# Altium schematic symbol library SBC_Schlib.SchLib: 69 symbols
Pins are listed as number, name and electrical type; pins without a type are passive.

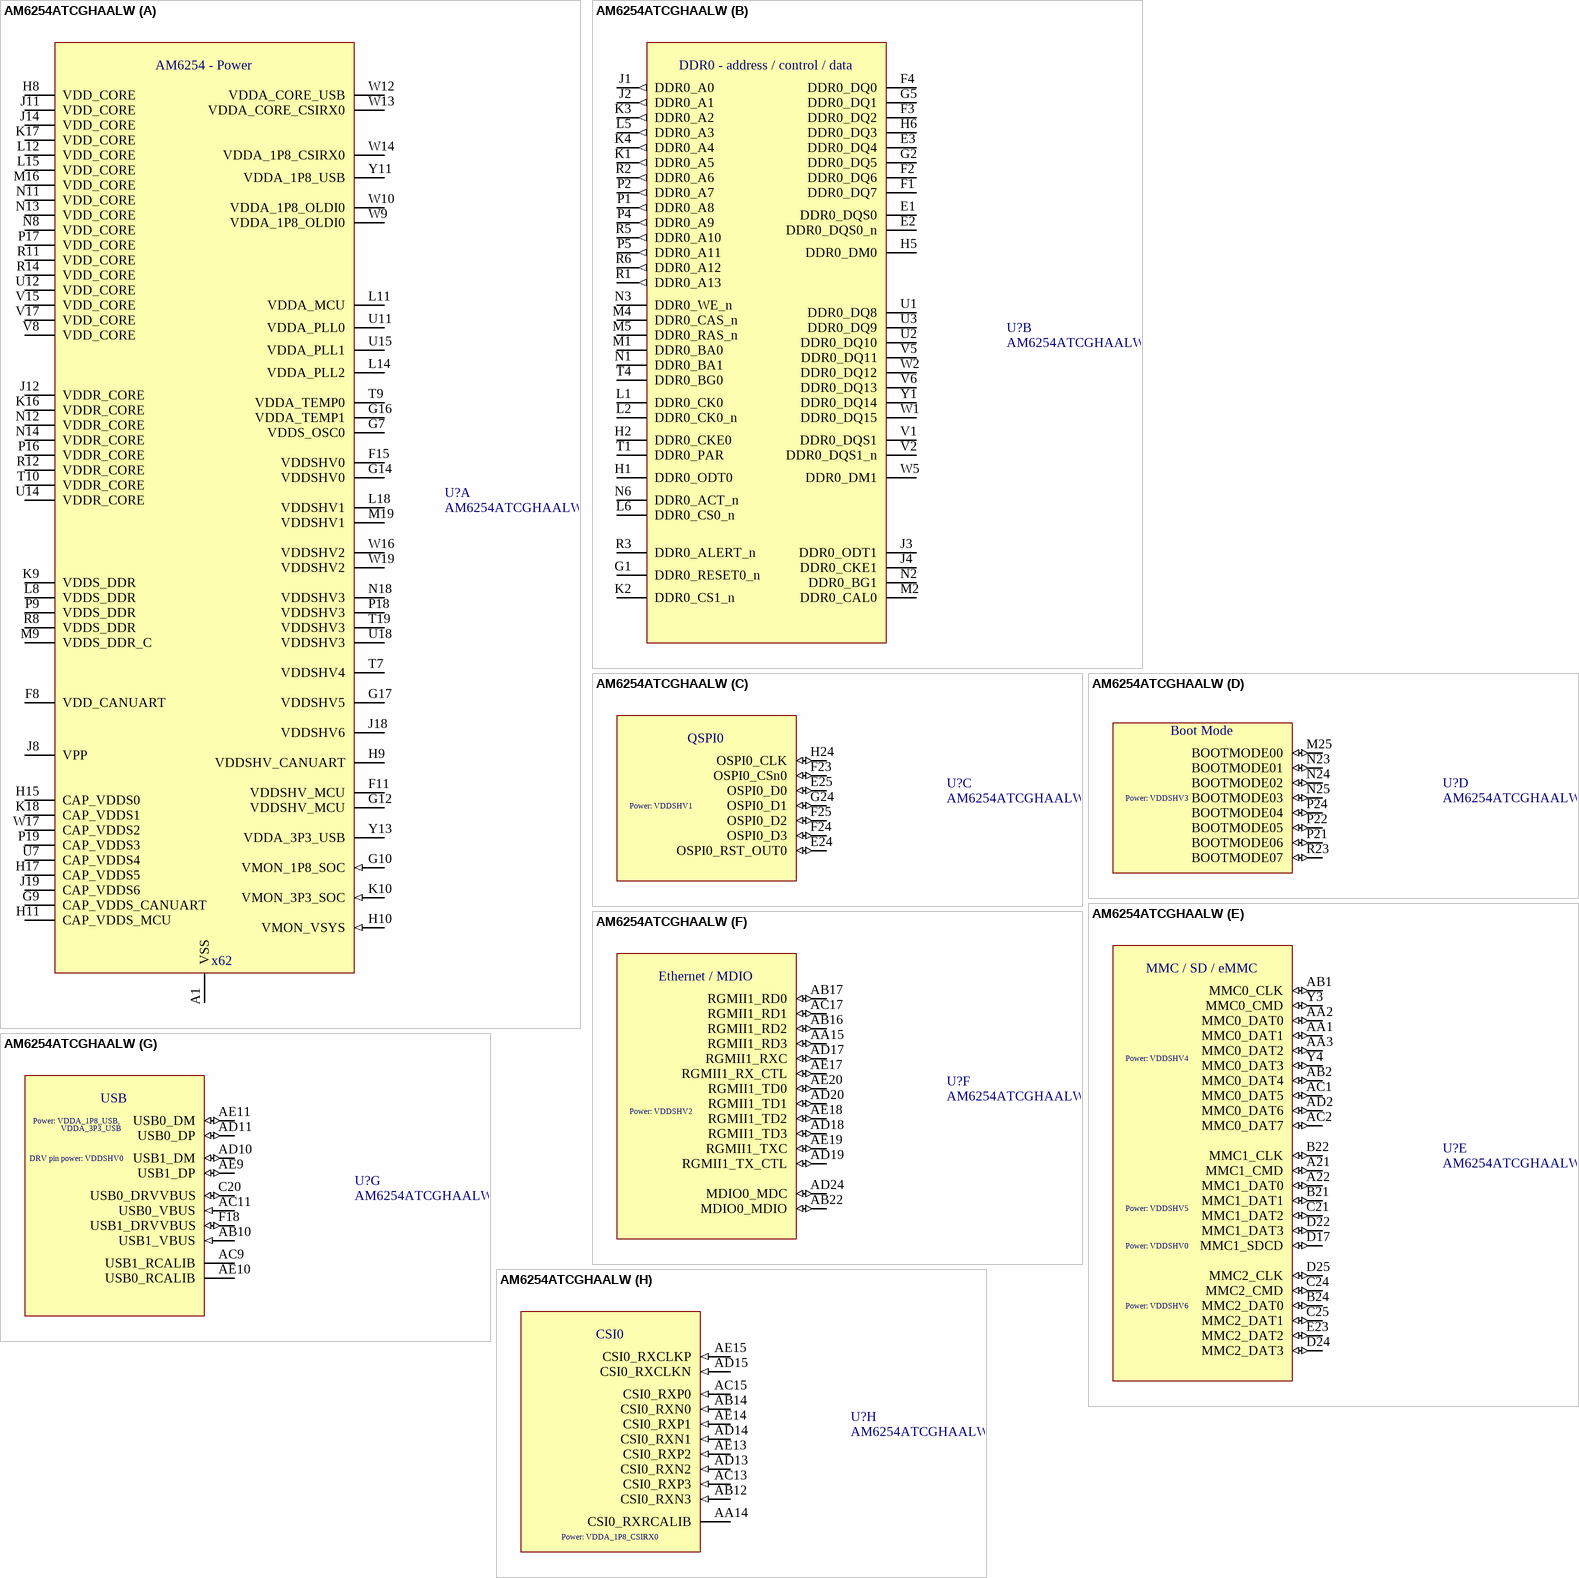
[diagram p0: symbol AM6254ATCGHAALW]

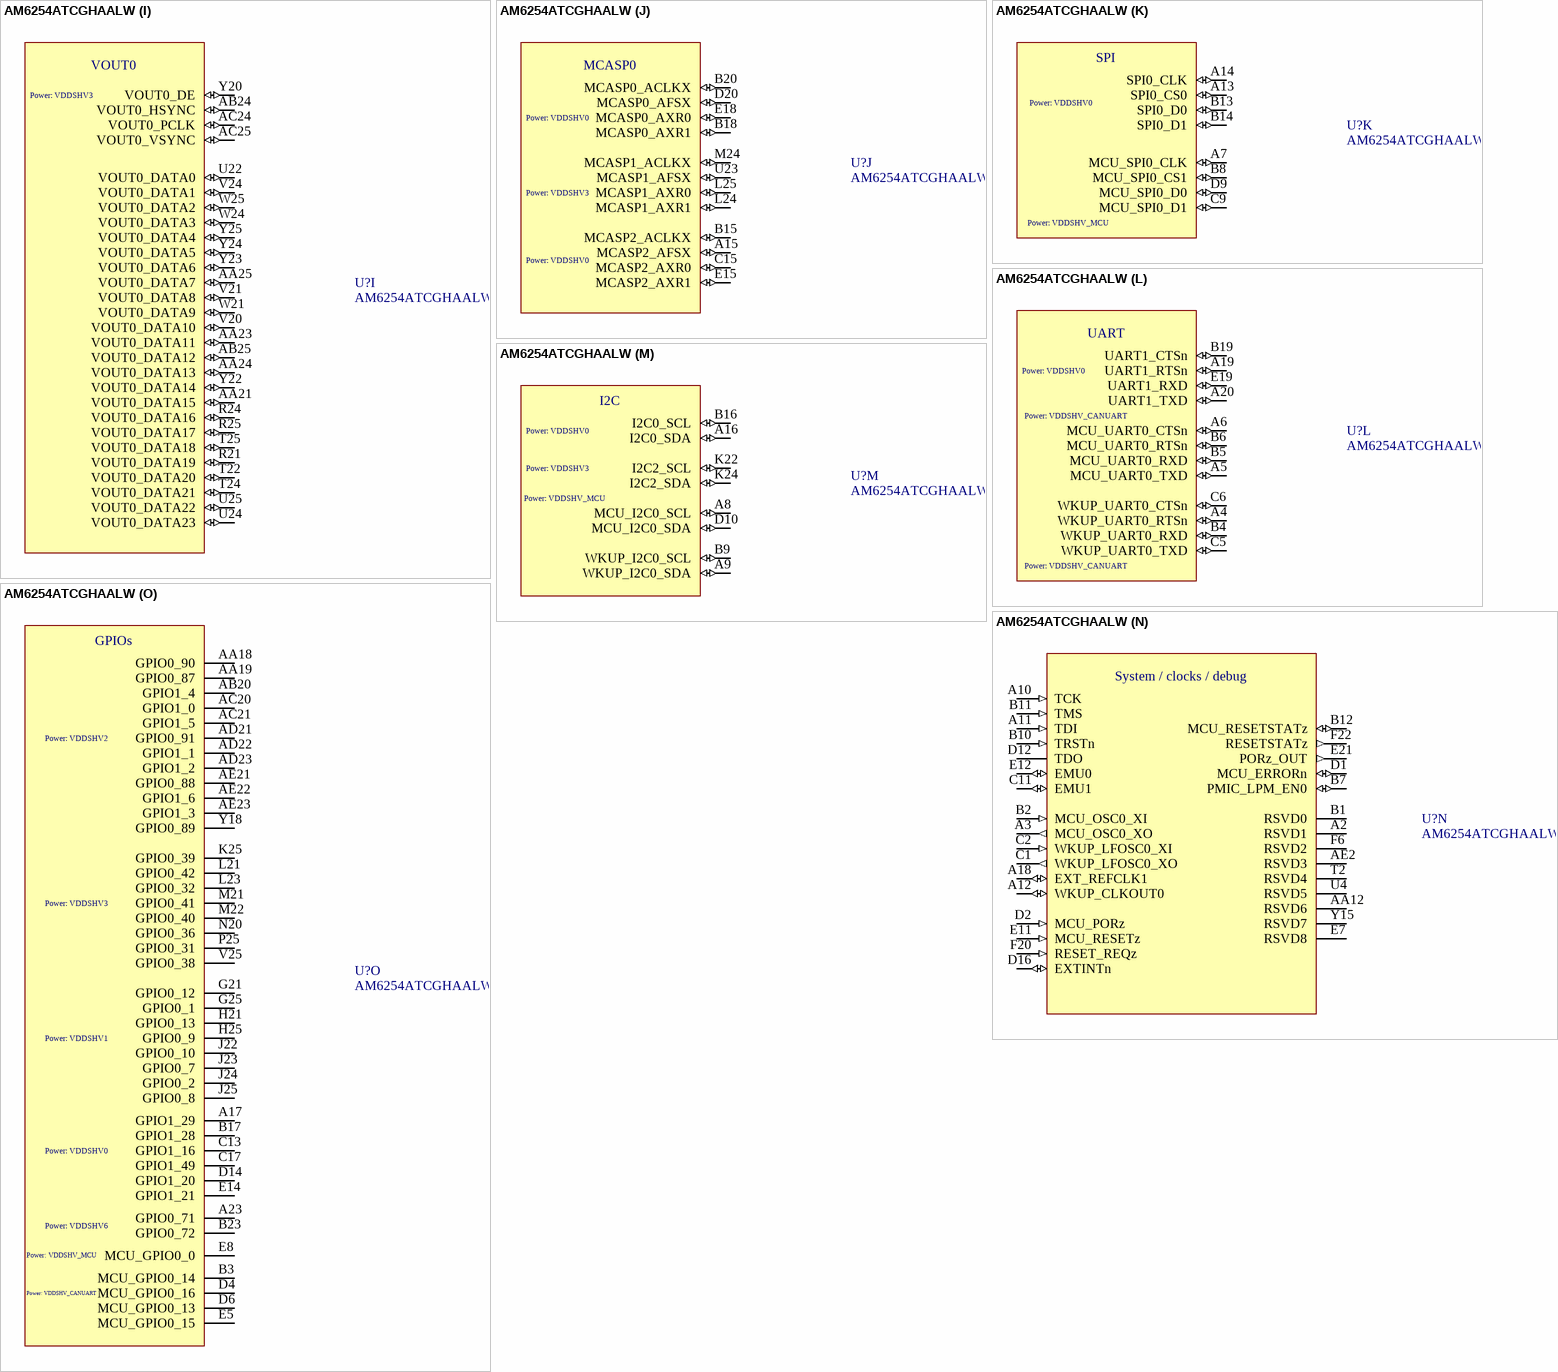
[diagram p1: symbol AM6254ATCGHAALW]

## AM6254ATCGHAALW
designator U?
TI AM6254, quad Cortex-A53 SoC, ALW 425-ball FCCSP 13x13mm 0.5mm pitch; separate interface and power units; Pinmux_Note: Each physical ball occurs once under its primary interface. See companion pinmux CSV for alternate functions. Multiplexable digital pads use bidirectional ERC type.; KiCad_Footprint: SamacSys_Parts:BGA425C50P25X25_1300X1300X89; MPN: AM6254ATCGHAALW; Footprint_Note: Unassigned: requires verified ALW0425 425-ball FCCSP, 13x13mm, 0.5mm pitch; do not substitute a fully populated BGA.; Datasheet: https://www.ti.com/lit/ds/symlink/am625.pdf; ComponentLink1Description: Datasheet; ComponentLink1URL: https://www.ti.com/lit/ds/symlink/am625.pdf
footprint AM6254ATCGHAALW
part A pins: A1 VSS (power), A24 VSS, A25 VSS, AA11 VSS, AB9 VSS, AD1 VSS, AD9 VSS, AD12 VSS, AD16 VSS, AD25 VSS, AE1 VSS, AE8 VSS, AE12 VSS, AE16 VSS, AE24 VSS, AE25 VSS, B25 VSS, F8 VDD_CANUART (power), F11 VDDSHV_MCU (power), F13 VSS, F15 VDDSHV0 (power), G7 VDDS_OSC0 (power), G9 CAP_VDDS_CANUART, G10 VMON_1P8_SOC (in), G12 VDDSHV_MCU (power), G13 VSS, G14 VDDSHV0 (power), G16 VDDA_TEMP1 (power), G17 VDDSHV5 (power), G19 VSS, H8 VDD_CORE (power), H9 VDDSHV_CANUART (power), H10 VMON_VSYS (in), H11 CAP_VDDS_MCU, H13 VSS, H15 CAP_VDDS0, H16 VSS, H17 CAP_VDDS5, H18 VSS, H20 VSS, J7 VSS, J8 VPP (power), J11 VDD_CORE (power), J12 VDDR_CORE (power), J13 VSS, J14 VDD_CORE (power), J18 VDDSHV6 (power), J19 CAP_VDDS6, K7 VSS, K9 VDDS_DDR (power), K10 VMON_3P3_SOC (in), K13 VSS, K15 VSS, K16 VDDR_CORE (power), K17 VDD_CORE (power), K18 CAP_VDDS1, K19 VSS, L8 VDDS_DDR (power), L11 VDDA_MCU (power), L12 VDD_CORE (power), L14 VDDA_PLL2 (power), L15 VDD_CORE (power), L18 VDDSHV1 (power), L20 VSS, M7 VSS, M8 VSS, M9 VDDS_DDR_C (power), M10 VSS, M12 VSS, M13 VSS, M16 VDD_CORE (power), M17 VSS, M18 VSS, M19 VDDSHV1 (power), N8 VDD_CORE (power), N11 VDD_CORE (power), N12 VDDR_CORE (power), N13 VDD_CORE (power), N14 VDDR_CORE (power), N15 VSS, N18 VDDSHV3 (power), P7 VSS, P9 VDDS_DDR (power), P10 VSS, P13 VSS, P16 VDDR_CORE (power), P17 VDD_CORE (power), P18 VDDSHV3 (power), P19 CAP_VDDS3, R8 VDDS_DDR (power), R11 VDD_CORE (power), R12 VDDR_CORE (power), R13 VSS, R14 VDD_CORE (power), R15 VSS, R18 VSS, R20 VSS, T7 VDDSHV4 (power), T8 VSS, T9 VDDA_TEMP0 (power), T10 VDDR_CORE (power), T13 VSS, T14 VSS, T16 VSS, T17 VSS, T18 VSS, T19 VDDSHV3 (power), U7 CAP_VDDS4, U8 VSS, U11 VDDA_PLL0 (power), U12 VDD_CORE (power), U14 VDDR_CORE (power), U15 VDDA_PLL1 (power), U18 VDDSHV3 (power), U19 VSS, V8 VDD_CORE (power), V9 VSS, V10 VSS, V11 VSS, V13 VSS, V15 VDD_CORE (power), V16 VSS, V17 VDD_CORE (power), V18 VSS, W7 VSS, W9 VDDA_1P8_OLDI0 (power), W10 VDDA_1P8_OLDI0 (power), W12 VDDA_CORE_USB (power), W13 VDDA_CORE_CSIRX0 (power), W14 VDDA_1P8_CSIRX0 (power), W16 VDDSHV2 (power), W17 CAP_VDDS2, W19 VDDSHV2 (power), Y2 VSS, Y11 VDDA_1P8_USB (power), Y13 VDDA_3P3_USB (power)
part B pins: E1 DDR0_DQS0, E2 DDR0_DQS0_n, E3 DDR0_DQ4, F1 DDR0_DQ7, F2 DDR0_DQ6, F3 DDR0_DQ2, F4 DDR0_DQ0, G1 DDR0_RESET0_n, G2 DDR0_DQ5, G5 DDR0_DQ1, H1 DDR0_ODT0, H2 DDR0_CKE0, H5 DDR0_DM0, H6 DDR0_DQ3, J1 DDR0_A0 (out), J2 DDR0_A1 (out), J3 DDR0_ODT1, J4 DDR0_CKE1, K1 DDR0_A5 (out), K2 DDR0_CS1_n, K3 DDR0_A2 (out), K4 DDR0_A4 (out), L1 DDR0_CK0, L2 DDR0_CK0_n, L5 DDR0_A3 (out), L6 DDR0_CS0_n, M1 DDR0_BA0, M2 DDR0_CAL0, M4 DDR0_CAS_n, M5 DDR0_RAS_n, N1 DDR0_BA1, N2 DDR0_BG1, N3 DDR0_WE_n, N6 DDR0_ACT_n, P1 DDR0_A8 (out), P2 DDR0_A7 (out), P4 DDR0_A9 (out), P5 DDR0_A11 (out), R1 DDR0_A13 (out), R2 DDR0_A6 (out), R3 DDR0_ALERT_n, R5 DDR0_A10 (out), R6 DDR0_A12 (out), T1 DDR0_PAR, T4 DDR0_BG0, U1 DDR0_DQ8, U2 DDR0_DQ10, U3 DDR0_DQ9, V1 DDR0_DQS1, V2 DDR0_DQS1_n, V5 DDR0_DQ11, V6 DDR0_DQ13, W1 DDR0_DQ15, W2 DDR0_DQ12, W5 DDR0_DM1, Y1 DDR0_DQ14
part C pins: E24 OSPI0_RST_OUT0 (io), E25 OSPI0_D0 (io), F23 OSPI0_CSn0 (io), F24 OSPI0_D3 (io), F25 OSPI0_D2 (io), G24 OSPI0_D1 (io), H24 OSPI0_CLK (io)
part D pins: M25 BOOTMODE00 (io), N23 BOOTMODE01 (io), N24 BOOTMODE02 (io), N25 BOOTMODE03 (io), P21 BOOTMODE06 (io), P22 BOOTMODE05 (io), P24 BOOTMODE04 (io), R23 BOOTMODE07 (io)
part E pins: A21 MMC1_CMD (io), A22 MMC1_DAT0 (io), AA1 MMC0_DAT1 (io), AA2 MMC0_DAT0 (io), AA3 MMC0_DAT2 (io), AB1 MMC0_CLK (io), AB2 MMC0_DAT4 (io), AC1 MMC0_DAT5 (io), AC2 MMC0_DAT7 (io), AD2 MMC0_DAT6 (io), B21 MMC1_DAT1 (io), B22 MMC1_CLK (io), B24 MMC2_DAT0 (io), C21 MMC1_DAT2 (io), C24 MMC2_CMD (io), C25 MMC2_DAT1 (io), D17 MMC1_SDCD (io), D22 MMC1_DAT3 (io), D24 MMC2_DAT3 (io), D25 MMC2_CLK (io), E23 MMC2_DAT2 (io), Y3 MMC0_CMD (io), Y4 MMC0_DAT3 (io)
part F pins: AA15 RGMII1_RD3 (io), AB16 RGMII1_RD2 (io), AB17 RGMII1_RD0 (io), AB22 MDIO0_MDIO (io), AC17 RGMII1_RD1 (io), AD17 RGMII1_RXC (io), AD18 RGMII1_TD3 (io), AD19 RGMII1_TX_CTL (io), AD20 RGMII1_TD1 (io), AD24 MDIO0_MDC (io), AE17 RGMII1_RX_CTL (io), AE18 RGMII1_TD2 (io), AE19 RGMII1_TXC (io), AE20 RGMII1_TD0 (io)
part G pins: AB10 USB1_VBUS (in), AC9 USB1_RCALIB, AC11 USB0_VBUS (in), AD10 USB1_DM (io), AD11 USB0_DP (io), AE9 USB1_DP (io), AE10 USB0_RCALIB, AE11 USB0_DM (io), C20 USB0_DRVVBUS (io), F18 USB1_DRVVBUS (io)
part H pins: AA14 CSI0_RXRCALIB, AB12 CSI0_RXN3 (in), AB14 CSI0_RXN0 (in), AC13 CSI0_RXP3 (in), AC15 CSI0_RXP0 (in), AD13 CSI0_RXN2 (in), AD14 CSI0_RXN1 (in), AD15 CSI0_RXCLKN (in), AE13 CSI0_RXP2 (in), AE14 CSI0_RXP1 (in), AE15 CSI0_RXCLKP (in)
part I pins: AA21 VOUT0_DATA15 (io), AA23 VOUT0_DATA11 (io), AA24 VOUT0_DATA13 (io), AA25 VOUT0_DATA7 (io), AB24 VOUT0_HSYNC (io), AB25 VOUT0_DATA12 (io), AC24 VOUT0_PCLK (io), AC25 VOUT0_VSYNC (io), R21 VOUT0_DATA19 (io), R24 VOUT0_DATA16 (io), R25 VOUT0_DATA17 (io), T22 VOUT0_DATA20 (io), T24 VOUT0_DATA21 (io), T25 VOUT0_DATA18 (io), U22 VOUT0_DATA0 (io), U24 VOUT0_DATA23 (io), U25 VOUT0_DATA22 (io), V20 VOUT0_DATA10 (io), V21 VOUT0_DATA8 (io), V24 VOUT0_DATA1 (io), W21 VOUT0_DATA9 (io), W24 VOUT0_DATA3 (io), W25 VOUT0_DATA2 (io), Y20 VOUT0_DE (io), Y22 VOUT0_DATA14 (io), Y23 VOUT0_DATA6 (io), Y24 VOUT0_DATA5 (io), Y25 VOUT0_DATA4 (io)
part J pins: A15 MCASP2_AFSX (io), B15 MCASP2_ACLKX (io), B18 MCASP0_AXR1 (io), B20 MCASP0_ACLKX (io), C15 MCASP2_AXR0 (io), D20 MCASP0_AFSX (io), E15 MCASP2_AXR1 (io), E18 MCASP0_AXR0 (io), L24 MCASP1_AXR1 (io), L25 MCASP1_AXR0 (io), M24 MCASP1_ACLKX (io), U23 MCASP1_AFSX (io)
part K pins: A7 MCU_SPI0_CLK (io), A13 SPI0_CS0 (io), A14 SPI0_CLK (io), B8 MCU_SPI0_CS1 (io), B13 SPI0_D0 (io), B14 SPI0_D1 (io), C9 MCU_SPI0_D1 (io), D9 MCU_SPI0_D0 (io)
part L pins: A4 WKUP_UART0_RTSn (io), A5 MCU_UART0_TXD (io), A6 MCU_UART0_CTSn (io), A19 UART1_RTSn (io), A20 UART1_TXD (io), B4 WKUP_UART0_RXD (io), B5 MCU_UART0_RXD (io), B6 MCU_UART0_RTSn (io), B19 UART1_CTSn (io), C5 WKUP_UART0_TXD (io), C6 WKUP_UART0_CTSn (io), E19 UART1_RXD (io)
part M pins: A8 MCU_I2C0_SCL (io), A9 WKUP_I2C0_SDA (io), A16 I2C0_SDA (io), B9 WKUP_I2C0_SCL (io), B16 I2C0_SCL (io), D10 MCU_I2C0_SDA (io), K22 I2C2_SCL (io), K24 I2C2_SDA (io)
part N pins: A2 RSVD1, A3 MCU_OSC0_XO (out), A10 TCK (in), A11 TDI (in), A12 WKUP_CLKOUT0 (io), A18 EXT_REFCLK1 (io), AA12 RSVD6, AE2 RSVD3, B1 RSVD0, B2 MCU_OSC0_XI (in), B7 PMIC_LPM_EN0 (io), B10 TRSTn (in), B11 TMS (in), B12 MCU_RESETSTATz (io), C1 WKUP_LFOSC0_XO (out), C2 WKUP_LFOSC0_XI (in), C11 EMU1 (io), D1 MCU_ERRORn (io), D2 MCU_PORz (in), D12 TDO (hiz), D16 EXTINTn (io), E7 RSVD8, E11 MCU_RESETz (in), E12 EMU0 (io), E21 PORz_OUT (out), F6 RSVD2, F20 RESET_REQz (in), F22 RESETSTATz (out), T2 RSVD4, U4 RSVD5, Y15 RSVD7
part O pins: A17 GPIO1_29, A23 GPIO0_71, AA18 GPIO0_90, AA19 GPIO0_87, AB20 GPIO1_4, AC20 GPIO1_0, AC21 GPIO1_5, AD21 GPIO0_91, AD22 GPIO1_1, AD23 GPIO1_2, AE21 GPIO0_88, AE22 GPIO1_6, AE23 GPIO1_3, B3 MCU_GPIO0_14, B17 GPIO1_28, B23 GPIO0_72, C13 GPIO1_16, C17 GPIO1_49, D4 MCU_GPIO0_16, D6 MCU_GPIO0_13, D14 GPIO1_20, E5 MCU_GPIO0_15, E8 MCU_GPIO0_0, E14 GPIO1_21, G21 GPIO0_12, G25 GPIO0_1, H21 GPIO0_13, H25 GPIO0_9, J22 GPIO0_10, J23 GPIO0_7, J24 GPIO0_2, J25 GPIO0_8, K25 GPIO0_39, L21 GPIO0_42, L23 GPIO0_32, M21 GPIO0_41, M22 GPIO0_40, N20 GPIO0_36, P25 GPIO0_31, V25 GPIO0_38, Y18 GPIO0_89
part A text: AM6254 - Power; x62
part B text: DDR0 - address / control / data
part C text: QSPI0; Power: VDDSHV1
part D text: Boot Mode; Power: VDDSHV3
part E text: MMC / SD / eMMC; Power: VDDSHV4; Power: VDDSHV5; Power: VDDSHV0; Power: VDDSHV6
part F text: Ethernet / MDIO; Power: VDDSHV2
part G text: USB; Power: VDDA_1P8_USB,; DRV pin power: VDDSHV0
part H text: CSI0; Power: VDDA_1P8_CSIRX0
part I text: VOUT0; Power: VDDSHV3
part J text: MCASP0; Power: VDDSHV0; Power: VDDSHV3
part K text: SPI; Power: VDDSHV0; Power: VDDSHV_MCU
part L text: UART; Power: VDDSHV0; Power: VDDSHV_CANUART
part M text: I2C; Power: VDDSHV0; Power: VDDSHV3; Power: VDDSHV_MCU
part N text: System / clocks / debug
part O text: GPIOs; Power: VDDSHV2; Power: VDDSHV3; Power: VDDSHV1; Power: VDDSHV0; Power: VDDSHV6; Power: VDDSHV_MCU; Power: VDDSHV_CANUART

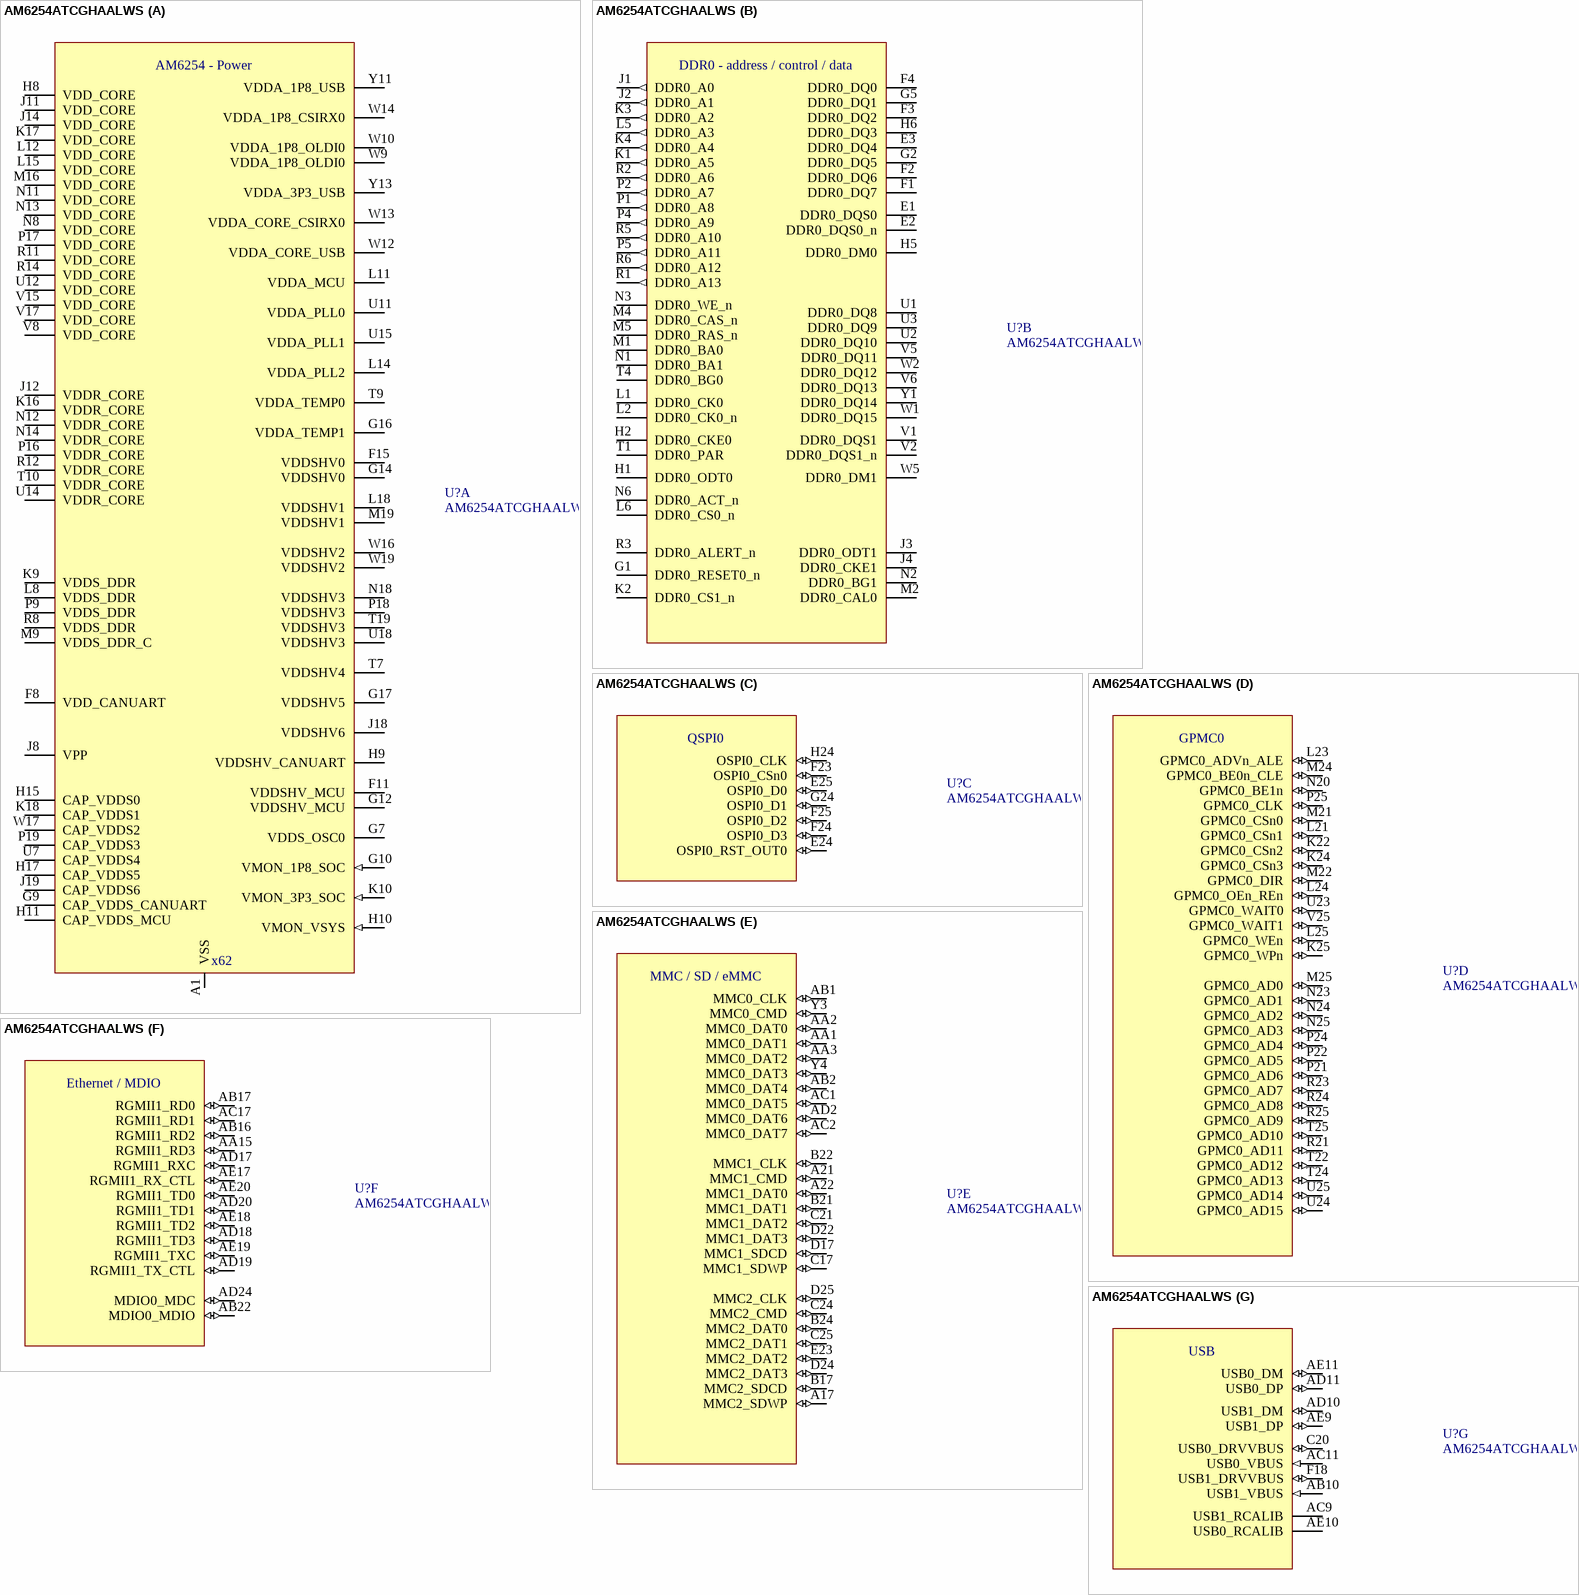
[diagram p2: symbol AM6254ATCGHAALWS]

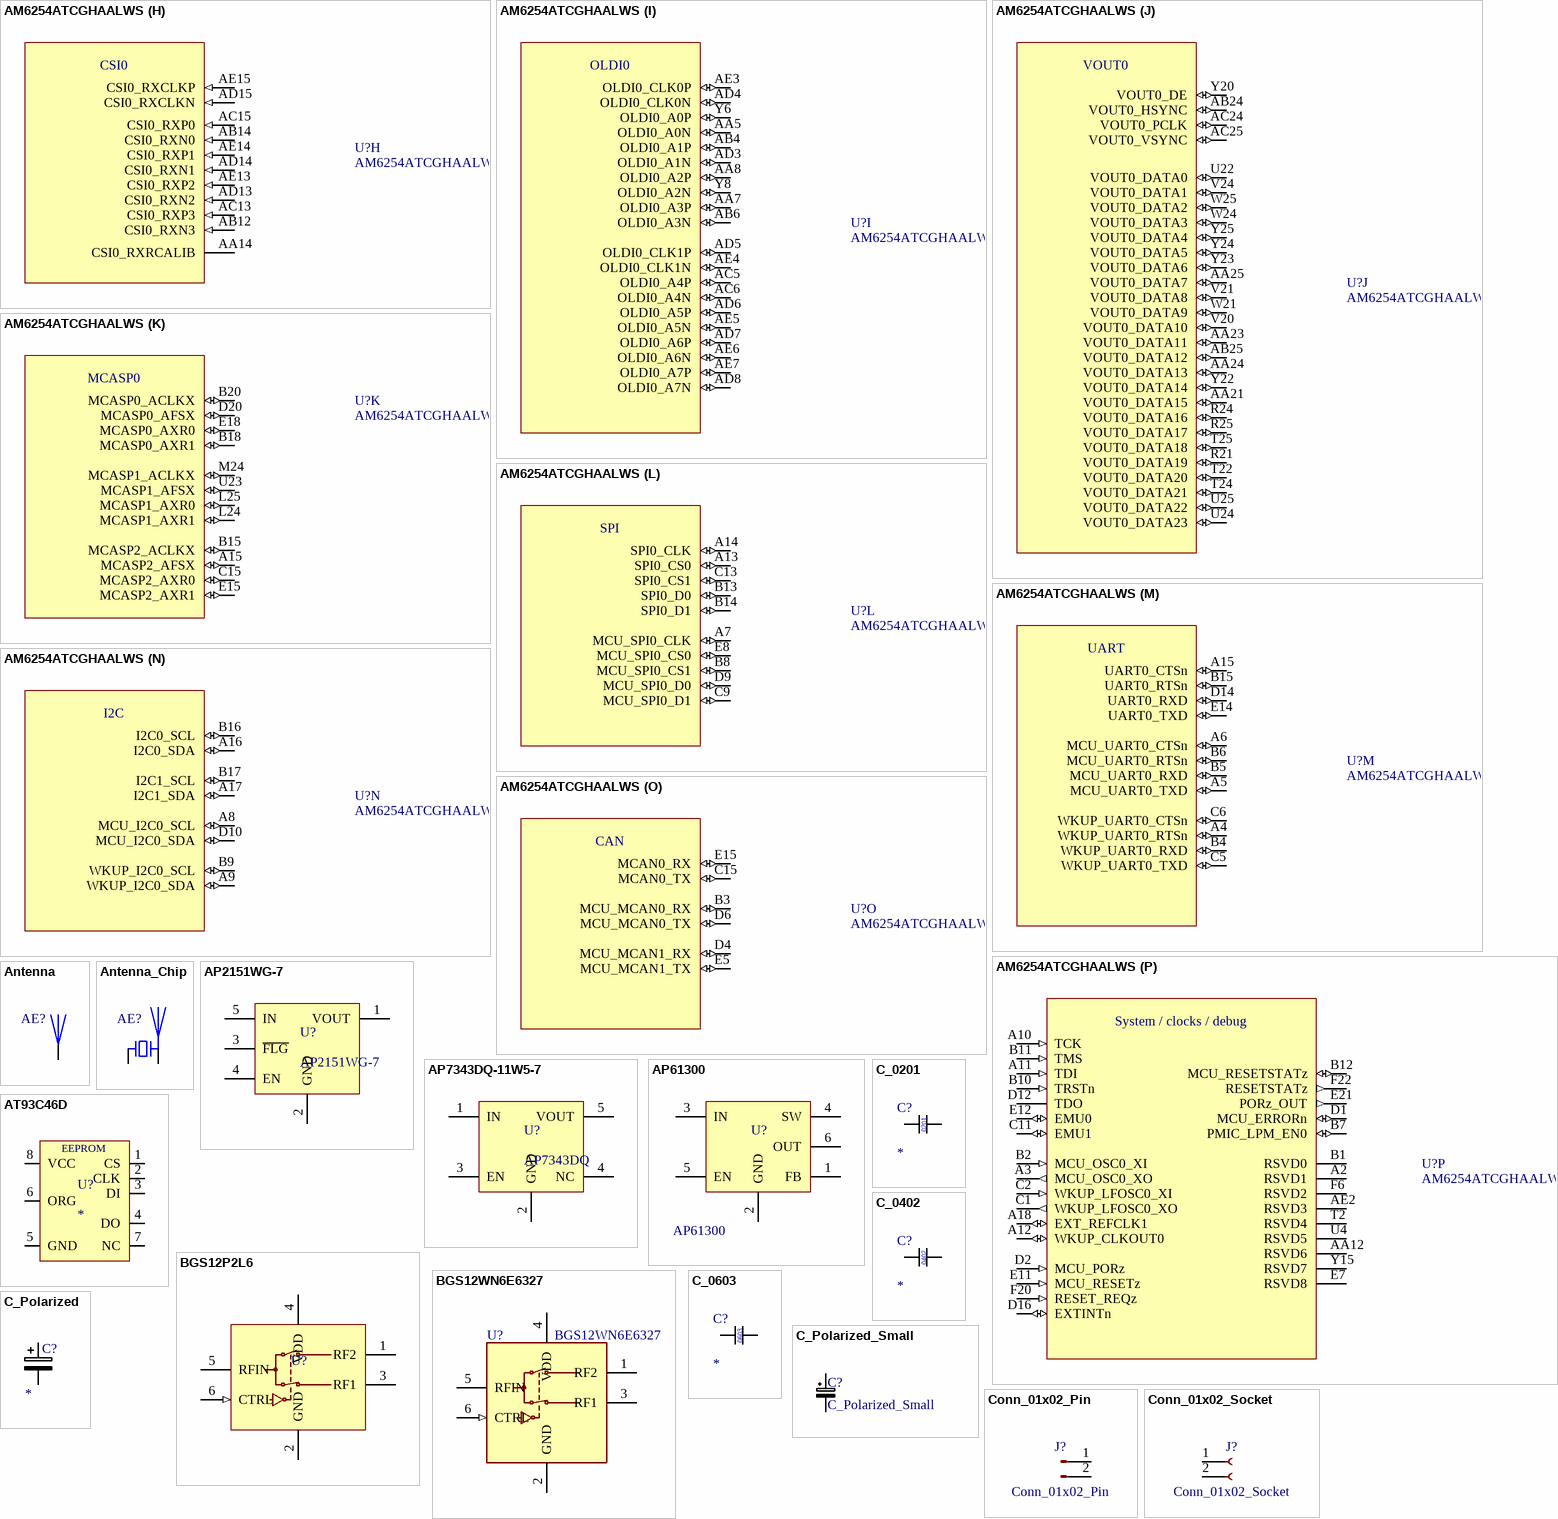
[diagram p3: symbols AM6254ATCGHAALWS to Conn_01x02_Socket]

## AM6254ATCGHAALWS
designator U?, comment AM6254ATCGHAALW
TI AM6254, quad Cortex-A53 SoC, ALW 425-ball FCCSP 13x13mm 0.5mm pitch; separate interface and power units; Pinmux_Note: Each physical ball occurs once under its primary interface. See companion pinmux CSV for alternate functions. Multiplexable digital pads use bidirectional ERC type.; KiCad_Footprint: SamacSys_Parts:BGA425C50P25X25_1300X1300X89; MPN: AM6254ATCGHAALW; Footprint_Note: Unassigned: requires verified ALW0425 425-ball FCCSP, 13x13mm, 0.5mm pitch; do not substitute a fully populated BGA.; Datasheet: https://www.ti.com/lit/ds/symlink/am625.pdf; ComponentLink1Description: Datasheet; ComponentLink1URL: https://www.ti.com/lit/ds/symlink/am625.pdf
footprint AM6254ATCGHAALW
part A pins: A1 VSS (power), A24 VSS hidden, A25 VSS hidden, AA11 VSS hidden, AB9 VSS hidden, AD1 VSS hidden, AD9 VSS hidden, AD12 VSS hidden, AD16 VSS hidden, AD25 VSS hidden, AE1 VSS hidden, AE8 VSS hidden, AE12 VSS hidden, AE16 VSS hidden, AE24 VSS hidden, AE25 VSS hidden, B25 VSS hidden, F8 VDD_CANUART (power), F11 VDDSHV_MCU (power), F13 VSS hidden, F15 VDDSHV0 (power), G7 VDDS_OSC0 (power), G9 CAP_VDDS_CANUART, G10 VMON_1P8_SOC (in), G12 VDDSHV_MCU (power), G13 VSS hidden, G14 VDDSHV0 (power), G16 VDDA_TEMP1 (power), G17 VDDSHV5 (power), G19 VSS hidden, H8 VDD_CORE (power), H9 VDDSHV_CANUART (power), H10 VMON_VSYS (in), H11 CAP_VDDS_MCU, H13 VSS hidden, H15 CAP_VDDS0, H16 VSS hidden, H17 CAP_VDDS5, H18 VSS hidden, H20 VSS hidden, J7 VSS hidden, J8 VPP (power), J11 VDD_CORE (power), J12 VDDR_CORE (power), J13 VSS hidden, J14 VDD_CORE (power), J18 VDDSHV6 (power), J19 CAP_VDDS6, K7 VSS hidden, K9 VDDS_DDR (power), K10 VMON_3P3_SOC (in), K13 VSS hidden, K15 VSS hidden, K16 VDDR_CORE (power), K17 VDD_CORE (power), K18 CAP_VDDS1, K19 VSS hidden, L8 VDDS_DDR (power), L11 VDDA_MCU (power), L12 VDD_CORE (power), L14 VDDA_PLL2 (power), L15 VDD_CORE (power), L18 VDDSHV1 (power), L20 VSS hidden, M7 VSS hidden, M8 VSS hidden, M9 VDDS_DDR_C (power), M10 VSS hidden, M12 VSS hidden, M13 VSS hidden, M16 VDD_CORE (power), M17 VSS hidden, M18 VSS hidden, M19 VDDSHV1 (power), N8 VDD_CORE (power), N11 VDD_CORE (power), N12 VDDR_CORE (power), N13 VDD_CORE (power), N14 VDDR_CORE (power), N15 VSS hidden, N18 VDDSHV3 (power), P7 VSS hidden, P9 VDDS_DDR (power), P10 VSS hidden, P13 VSS hidden, P16 VDDR_CORE (power), P17 VDD_CORE (power), P18 VDDSHV3 (power), P19 CAP_VDDS3, R8 VDDS_DDR (power), R11 VDD_CORE (power), R12 VDDR_CORE (power), R13 VSS hidden, R14 VDD_CORE (power), R15 VSS hidden, R18 VSS hidden, R20 VSS hidden, T7 VDDSHV4 (power), T8 VSS hidden, T9 VDDA_TEMP0 (power), T10 VDDR_CORE (power), T13 VSS hidden, T14 VSS hidden, T16 VSS hidden, T17 VSS hidden, T18 VSS hidden, T19 VDDSHV3 (power), U7 CAP_VDDS4, U8 VSS hidden, U11 VDDA_PLL0 (power), U12 VDD_CORE (power), U14 VDDR_CORE (power), U15 VDDA_PLL1 (power), U18 VDDSHV3 (power), U19 VSS hidden, V8 VDD_CORE (power), V9 VSS hidden, V10 VSS hidden, V11 VSS hidden, V13 VSS hidden, V15 VDD_CORE (power), V16 VSS hidden, V17 VDD_CORE (power), V18 VSS hidden, W7 VSS hidden, W9 VDDA_1P8_OLDI0 (power), W10 VDDA_1P8_OLDI0 (power), W12 VDDA_CORE_USB (power), W13 VDDA_CORE_CSIRX0 (power), W14 VDDA_1P8_CSIRX0 (power), W16 VDDSHV2 (power), W17 CAP_VDDS2, W19 VDDSHV2 (power), Y2 VSS hidden, Y11 VDDA_1P8_USB (power), Y13 VDDA_3P3_USB (power)
part B pins: E1 DDR0_DQS0, E2 DDR0_DQS0_n, E3 DDR0_DQ4, F1 DDR0_DQ7, F2 DDR0_DQ6, F3 DDR0_DQ2, F4 DDR0_DQ0, G1 DDR0_RESET0_n, G2 DDR0_DQ5, G5 DDR0_DQ1, H1 DDR0_ODT0, H2 DDR0_CKE0, H5 DDR0_DM0, H6 DDR0_DQ3, J1 DDR0_A0 (out), J2 DDR0_A1 (out), J3 DDR0_ODT1, J4 DDR0_CKE1, K1 DDR0_A5 (out), K2 DDR0_CS1_n, K3 DDR0_A2 (out), K4 DDR0_A4 (out), L1 DDR0_CK0, L2 DDR0_CK0_n, L5 DDR0_A3 (out), L6 DDR0_CS0_n, M1 DDR0_BA0, M2 DDR0_CAL0, M4 DDR0_CAS_n, M5 DDR0_RAS_n, N1 DDR0_BA1, N2 DDR0_BG1, N3 DDR0_WE_n, N6 DDR0_ACT_n, P1 DDR0_A8 (out), P2 DDR0_A7 (out), P4 DDR0_A9 (out), P5 DDR0_A11 (out), R1 DDR0_A13 (out), R2 DDR0_A6 (out), R3 DDR0_ALERT_n, R5 DDR0_A10 (out), R6 DDR0_A12 (out), T1 DDR0_PAR, T4 DDR0_BG0, U1 DDR0_DQ8, U2 DDR0_DQ10, U3 DDR0_DQ9, V1 DDR0_DQS1, V2 DDR0_DQS1_n, V5 DDR0_DQ11, V6 DDR0_DQ13, W1 DDR0_DQ15, W2 DDR0_DQ12, W5 DDR0_DM1, Y1 DDR0_DQ14
part C pins: E24 OSPI0_RST_OUT0 (io), E25 OSPI0_D0 (io), F23 OSPI0_CSn0 (io), F24 OSPI0_D3 (io), F25 OSPI0_D2 (io), G24 OSPI0_D1 (io), H24 OSPI0_CLK (io)
part D pins: K22 GPMC0_CSn2 (io), K24 GPMC0_CSn3 (io), K25 GPMC0_WPn (io), L21 GPMC0_CSn1 (io), L23 GPMC0_ADVn_ALE (io), L24 GPMC0_OEn_REn (io), L25 GPMC0_WEn (io), M21 GPMC0_CSn0 (io), M22 GPMC0_DIR (io), M24 GPMC0_BE0n_CLE (io), M25 GPMC0_AD0 (io), N20 GPMC0_BE1n (io), N23 GPMC0_AD1 (io), N24 GPMC0_AD2 (io), N25 GPMC0_AD3 (io), P21 GPMC0_AD6 (io), P22 GPMC0_AD5 (io), P24 GPMC0_AD4 (io), P25 GPMC0_CLK (io), R21 GPMC0_AD11 (io), R23 GPMC0_AD7 (io), R24 GPMC0_AD8 (io), R25 GPMC0_AD9 (io), T22 GPMC0_AD12 (io), T24 GPMC0_AD13 (io), T25 GPMC0_AD10 (io), U23 GPMC0_WAIT0 (io), U24 GPMC0_AD15 (io), U25 GPMC0_AD14 (io), V25 GPMC0_WAIT1 (io)
part E pins: A17 MMC2_SDWP (io), A21 MMC1_CMD (io), A22 MMC1_DAT0 (io), AA1 MMC0_DAT1 (io), AA2 MMC0_DAT0 (io), AA3 MMC0_DAT2 (io), AB1 MMC0_CLK (io), AB2 MMC0_DAT4 (io), AC1 MMC0_DAT5 (io), AC2 MMC0_DAT7 (io), AD2 MMC0_DAT6 (io), B17 MMC2_SDCD (io), B21 MMC1_DAT1 (io), B22 MMC1_CLK (io), B24 MMC2_DAT0 (io), C17 MMC1_SDWP (io), C21 MMC1_DAT2 (io), C24 MMC2_CMD (io), C25 MMC2_DAT1 (io), D17 MMC1_SDCD (io), D22 MMC1_DAT3 (io), D24 MMC2_DAT3 (io), D25 MMC2_CLK (io), E23 MMC2_DAT2 (io), Y3 MMC0_CMD (io), Y4 MMC0_DAT3 (io)
part F pins: AA15 RGMII1_RD3 (io), AB16 RGMII1_RD2 (io), AB17 RGMII1_RD0 (io), AB22 MDIO0_MDIO (io), AC17 RGMII1_RD1 (io), AD17 RGMII1_RXC (io), AD18 RGMII1_TD3 (io), AD19 RGMII1_TX_CTL (io), AD20 RGMII1_TD1 (io), AD24 MDIO0_MDC (io), AE17 RGMII1_RX_CTL (io), AE18 RGMII1_TD2 (io), AE19 RGMII1_TXC (io), AE20 RGMII1_TD0 (io)
part G pins: AB10 USB1_VBUS (in), AC9 USB1_RCALIB, AC11 USB0_VBUS (in), AD10 USB1_DM (io), AD11 USB0_DP (io), AE9 USB1_DP (io), AE10 USB0_RCALIB, AE11 USB0_DM (io), C20 USB0_DRVVBUS (io), F18 USB1_DRVVBUS (io)
part H pins: AA14 CSI0_RXRCALIB, AB12 CSI0_RXN3 (in), AB14 CSI0_RXN0 (in), AC13 CSI0_RXP3 (in), AC15 CSI0_RXP0 (in), AD13 CSI0_RXN2 (in), AD14 CSI0_RXN1 (in), AD15 CSI0_RXCLKN (in), AE13 CSI0_RXP2 (in), AE14 CSI0_RXP1 (in), AE15 CSI0_RXCLKP (in)
part I pins: AA5 OLDI0_A0N (io), AA7 OLDI0_A3P (io), AA8 OLDI0_A2P (io), AB4 OLDI0_A1P (io), AB6 OLDI0_A3N (io), AC5 OLDI0_A4P (io), AC6 OLDI0_A4N (io), AD3 OLDI0_A1N (io), AD4 OLDI0_CLK0N (io), AD5 OLDI0_CLK1P (io), AD6 OLDI0_A5P (io), AD7 OLDI0_A6P (io), AD8 OLDI0_A7N (io), AE3 OLDI0_CLK0P (io), AE4 OLDI0_CLK1N (io), AE5 OLDI0_A5N (io), AE6 OLDI0_A6N (io), AE7 OLDI0_A7P (io), Y6 OLDI0_A0P (io), Y8 OLDI0_A2N (io)
part J pins: AA21 VOUT0_DATA15 (io), AA23 VOUT0_DATA11 (io), AA24 VOUT0_DATA13 (io), AA25 VOUT0_DATA7 (io), AB24 VOUT0_HSYNC (io), AB25 VOUT0_DATA12 (io), AC24 VOUT0_PCLK (io), AC25 VOUT0_VSYNC (io), R21 VOUT0_DATA19 (io), R24 VOUT0_DATA16 (io), R25 VOUT0_DATA17 (io), T22 VOUT0_DATA20 (io), T24 VOUT0_DATA21 (io), T25 VOUT0_DATA18 (io), U22 VOUT0_DATA0 (io), U24 VOUT0_DATA23 (io), U25 VOUT0_DATA22 (io), V20 VOUT0_DATA10 (io), V21 VOUT0_DATA8 (io), V24 VOUT0_DATA1 (io), W21 VOUT0_DATA9 (io), W24 VOUT0_DATA3 (io), W25 VOUT0_DATA2 (io), Y20 VOUT0_DE (io), Y22 VOUT0_DATA14 (io), Y23 VOUT0_DATA6 (io), Y24 VOUT0_DATA5 (io), Y25 VOUT0_DATA4 (io)
part K pins: A15 MCASP2_AFSX (io), B15 MCASP2_ACLKX (io), B18 MCASP0_AXR1 (io), B20 MCASP0_ACLKX (io), C15 MCASP2_AXR0 (io), D20 MCASP0_AFSX (io), E15 MCASP2_AXR1 (io), E18 MCASP0_AXR0 (io), L24 MCASP1_AXR1 (io), L25 MCASP1_AXR0 (io), M24 MCASP1_ACLKX (io), U23 MCASP1_AFSX (io)
part L pins: A7 MCU_SPI0_CLK (io), A13 SPI0_CS0 (io), A14 SPI0_CLK (io), B8 MCU_SPI0_CS1 (io), B13 SPI0_D0 (io), B14 SPI0_D1 (io), C9 MCU_SPI0_D1 (io), C13 SPI0_CS1 (io), D9 MCU_SPI0_D0 (io), E8 MCU_SPI0_CS0 (io)
part M pins: A4 WKUP_UART0_RTSn (io), A5 MCU_UART0_TXD (io), A6 MCU_UART0_CTSn (io), A15 UART0_CTSn (io), B4 WKUP_UART0_RXD (io), B5 MCU_UART0_RXD (io), B6 MCU_UART0_RTSn (io), B15 UART0_RTSn (io), C5 WKUP_UART0_TXD (io), C6 WKUP_UART0_CTSn (io), D14 UART0_RXD (io), E14 UART0_TXD (io)
part N pins: A8 MCU_I2C0_SCL (io), A9 WKUP_I2C0_SDA (io), A16 I2C0_SDA (io), A17 I2C1_SDA (io), B9 WKUP_I2C0_SCL (io), B16 I2C0_SCL (io), B17 I2C1_SCL (io), D10 MCU_I2C0_SDA (io)
part O pins: B3 MCU_MCAN0_RX (io), C15 MCAN0_TX (io), D4 MCU_MCAN1_RX (io), D6 MCU_MCAN0_TX (io), E5 MCU_MCAN1_TX (io), E15 MCAN0_RX (io)
part P pins: A2 RSVD1, A3 MCU_OSC0_XO (out), A10 TCK (in), A11 TDI (in), A12 WKUP_CLKOUT0 (io), A18 EXT_REFCLK1 (io), AA12 RSVD6, AE2 RSVD3, B1 RSVD0, B2 MCU_OSC0_XI (in), B7 PMIC_LPM_EN0 (io), B10 TRSTn (in), B11 TMS (in), B12 MCU_RESETSTATz (io), C1 WKUP_LFOSC0_XO (out), C2 WKUP_LFOSC0_XI (in), C11 EMU1 (io), D1 MCU_ERRORn (io), D2 MCU_PORz (in), D12 TDO (hiz), D16 EXTINTn (io), E7 RSVD8, E11 MCU_RESETz (in), E12 EMU0 (io), E21 PORz_OUT (out), F6 RSVD2, F20 RESET_REQz (in), F22 RESETSTATz (out), T2 RSVD4, U4 RSVD5, Y15 RSVD7
part A text: AM6254 - Power; x62
part B text: DDR0 - address / control / data
part C text: QSPI0
part D text: GPMC0
part E text: MMC / SD / eMMC
part F text: Ethernet / MDIO
part G text: USB
part H text: CSI0
part I text: OLDI0
part J text: VOUT0
part K text: MCASP0
part L text: SPI
part M text: UART
part N text: I2C
part O text: CAN
part P text: System / clocks / debug

## Antenna
designator AE?  (value not drawn)
Manufacturer_Name: Johanson Technology Inc.; Manufacturer_Part_Number: 2450AD14A5500001T; Value: 2450AD14A5500001T
footprint 2450AD14A5500001T
pins: 1 A

## Antenna_Chip
designator AE?  (value not drawn)
Ceramic chip antenna with pin for PCB trace
footprint 2450AD14A5500001T
pins: 1 GND, 4 FEED

## AP2151WG-7
designator U?
Linear Voltage Regulator IC Positive Fixed 1 Output 300mA SOT-25; Manufacturer_Name: Diodes Incorporated; Manufacturer_Part_Number: AP2151WG-7; Value: AP2151WG-7
footprint SOT-23-5 (TI SOT-23-5)
pins: 1 VOUT, 2 GND, 3 ~{FLG}, 4 EN, 5 IN

## AP7343DQ-11W5-7
designator U?, comment AP7343DQ
Linear Voltage Regulator IC Positive Fixed 1 Output 300mA SOT-25; Manufacturer_Name: Diodes Incorporated; Manufacturer_Part_Number: AP7343DQ-11W5-7; Value: AP7343DQ-11W5-7
pins: 1 IN, 2 GND, 3 EN, 4 NC, 5 VOUT

## AP61300
designator U?
Buck Switching Regulator IC Positive Adjustable 0.6V 1 Output 3A SOT-563; Manufacturer_Name: Diodes Incorporated; Manufacturer_Part_Number: AP61300Z6-7; Value: AP61300
footprint SOT563
pins: 1 FB, 2 GND, 3 IN, 4 SW, 5 EN, 6 OUT

## AT93C46D
designator U?
pins: 1 CS, 2 CLK, 3 DI, 4 DO, 5 GND, 6 ORG, 7 NC, 8 VCC
text: EEPROM

## BGS12P2L6
designator U?  (value not drawn)
RF Switch IC GSM, LTE, W-CDMA SPDT 50Ohm PG-TSLP-6-4; Manufacturer_Name: Infineon Technologies; Manufacturer_Part_Number: BGS12P2L6E6327XTSA1; Value: BGS12P2L6E6327XTSA1
pins: 1 RF2, 2 GND (power), 3 RF1, 4 VDD (power), 5 RFIN, 6 CTRL (in)

## BGS12WN6E6327
designator U?
SPDT DC-9GHz switch, 45dB isolation at 960MHz, PG-TSNP-6-10; KiCad_Footprint: Package_LGA:Infineon_PG-TSNP-6-10_0.7x1.1mm_0.7x1.1mm_P0.4mm; Datasheet: https://www.infineon.com/dgdl/Infineon-BGS12WN6-DataSheet-v02_05-EN.pdf?fileId=5546d4626b2d8e69016b89d2b3334727; ComponentLink1Description: Datasheet; ComponentLink1URL: https://www.infineon.com/dgdl/Infineon-BGS12WN6-DataSheet-v02_05-EN.pdf?fileId=5546d4626b2d8e69016b89d2b3334727
footprint Infineon_PG-TSNP-6-10_0.7x1.1mm_0.7x1.1mm_P0.4mm (Footprint)
pins: 1 RF2, 2 GND (power), 3 RF1, 4 VDD (power), 5 RFIN, 6 CTRL (in)

## C_0201
designator C?
MLCC 0201; Manufacturer_Name: *; Manufacturer_Part_Number: *; Value: *
footprint C0201
pins: 1, 2
text: 0201

## C_0402
designator C?
MLCC 0402; Manufacturer_Name: *; Manufacturer_Part_Number: *; Value: *
footprint C0402
pins: 1, 2
text: 0402

## C_0603
designator C?
MLCC 0603; Manufacturer_Name: *; Manufacturer_Part_Number: *; Value: *
pins: 1, 2
text: 0603

## C_Polarized
designator C?  (value not drawn)
Polarized capacitor; Manufacturer_Name: *; Manufacturer_Part_Number: *; Value: *
pins: 1, 2

## C_Polarized_Small
designator C?
Polarized capacitor, small symbol
pins: 1, 2

## Conn_01x02_Pin
designator J?
Generic connector, single row, 01x02, script generated
pins: 1 Pin_1, 2 Pin_2

## Conn_01x02_Socket
designator J?
Generic connector, single row, 01x02, script generated
pins: 1 Pin_1, 2 Pin_2

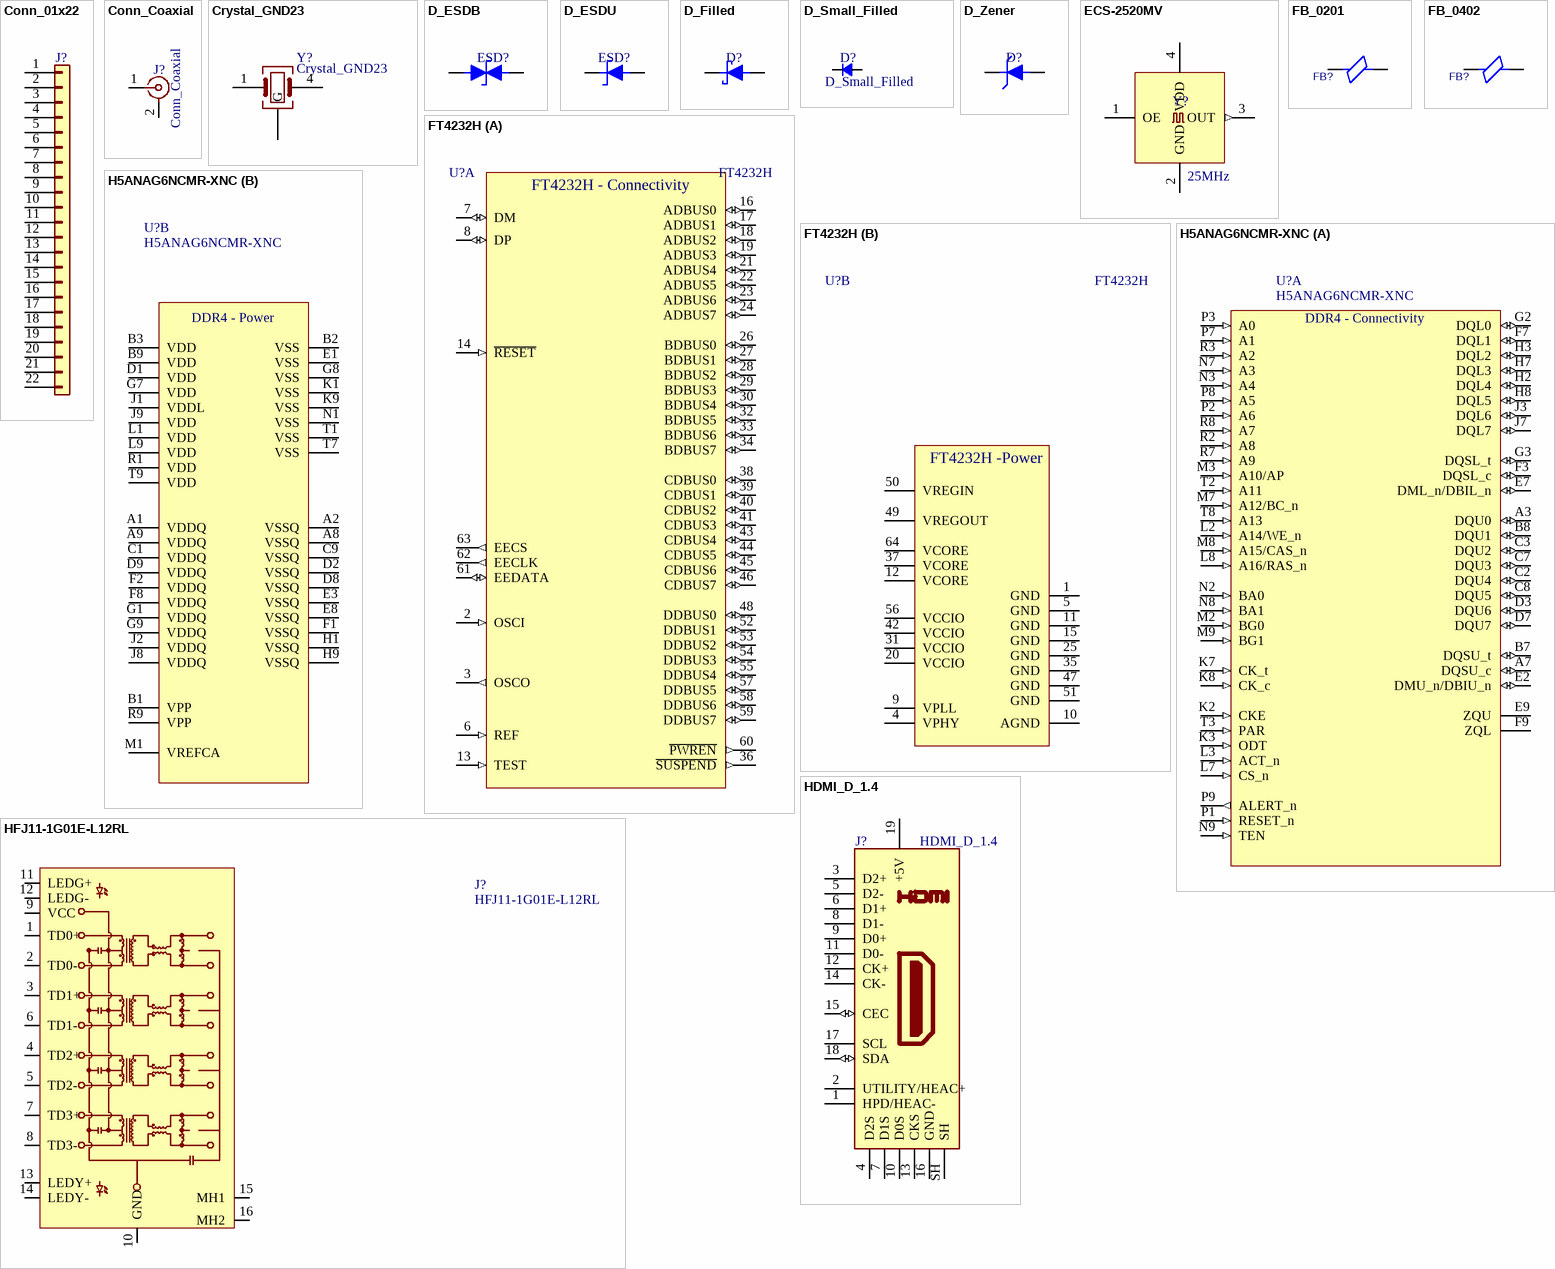
[diagram p4: symbols Conn_01x22 to HFJ11-1G01E-L12RL]

## Conn_01x22
designator J?  (value not drawn)
Generic connector, single row, 01x22, script generated (kicad-library-utils/schlib/autogen/connector/); Value: *; Manufacturer_Name: *; Manufacturer_Part_Number: *
footprint Hirose_FH12-22S-0.5SH_1x22-1MP_P0.50mm_Horizontal (Hirose FH12, FFC/FPC connector, FH12-22S-0.5SH, 22 Pins per row (https://www.hirose.com/product/en/products/FH12/FH12-24S-0.5SH(55)/))
footprint 5019512230
pins: 1 Pin_1, 2 Pin_2, 3 Pin_3, 4 Pin_4, 5 Pin_5, 6 Pin_6, 7 Pin_7, 8 Pin_8, 9 Pin_9, 10 Pin_10, 11 Pin_11, 12 Pin_12, 13 Pin_13, 14 Pin_14, 15 Pin_15, 16 Pin_16, 17 Pin_17, 18 Pin_18, 19 Pin_19, 20 Pin_20, 21 Pin_21, 22 Pin_22

## Conn_Coaxial
designator J?
coaxial connector (BNC, SMA, SMB, SMC, Cinch/RCA, LEMO, ...)
pins: 1 In, 2 Ext

## Crystal_GND23
designator Y?
Four pin crystal, GND on pins 2 and 3; Value: *
pins: 1, 2,3 G, 4

## D_ESDB
designator ESD?, comment D_Filled  (value not drawn)
ESD diode bi-directional; Manufacturer_Name: TECH PUBLIC; Value: ESD341DPLR; Manufacturer Part Number: ESD341DPLR
footprint ESD341
pins: 1 K, 2 A

## D_ESDU
designator ESD?, comment ESD  (value not drawn)
ESD diode uni-directional; Manufacturer_Name: TOSHIBA; Value: DF2S8.2FS,L3M; Manufacturer Part Number: DF2S8.2FS,L3M
footprint D_SOD-923 (https://www.onsemi.com/pub/Collateral/ESD9B-D.PDF#page=4)
pins: 1 K, 2 A

## D_Filled
designator D?  (value not drawn)
Diode, filled shape; Manufacturer_Name: Panjit International Inc.; Value: BAT54TS_R1_00001; Manufacturer Part Number: BAT54TS_R1_00001
footprint D_SOD-523 (http://www.diodes.com/datasheets/ap02001.pdf p.144)
pins: 1 K, 2 A

## D_Small_Filled
designator D?
Diode, small symbol, filled shape; Sim.Device: D; Sim.Pins: 1=K 2=A
pins: 1 K, 2 A

## D_Zener
designator D?, comment D_Filled  (value not drawn)
Diode, filled shape; Manufacturer_Name: Panjit International Inc.; Value: BAT54TS_R1_00001; Manufacturer Part Number: BAT54TS_R1_00001
footprint D_SOD-523 (http://www.diodes.com/datasheets/ap02001.pdf p.144)
pins: 1 K, 2 A

## ECS-2520MV
designator Y?  value 25MHz  (hidden comment: ECS-2520MV)
25 MHz XO (Standard) HCMOS Oscillator 1.6V ~ 3.6V Enable/Disable 4-SMD, No Lead; Manufacturer_Part_Number: ECS-2520MV-250-CN-TR; Manufacturer_Name: ECS
footprint Oscillator_SMD_ECS_2520MV-xxx-xx-4Pin_2.5x2.0mm (Miniature Crystal Clock Oscillator ECS 2520MV series, https://www.ecsxtal.com/store/pdf/ECS-2520MV.pdf)
pins: 1 OE, 2 GND (power), 3 OUT (out), 4 VDD (power)

## FB_0201
designator FB?
Ferrite bead; Parameter 1: *
footprint FB0201
pins: 1, 2

## FB_0402
designator FB?
Ferrite bead; Parameter 1: *
footprint FB0402
pins: 1, 2

## FT4232H
designator U?
Hi Speed Quad Channel USB UART/FIFO, LQFP/QFN-64; Datasheet: https://www.ftdichip.com/Support/Documents/DataSheets/ICs/DS_FT4232H.pdf; ComponentLink1Description: Datasheet; ComponentLink1URL: https://www.ftdichip.com/Support/Documents/DataSheets/ICs/DS_FT4232H.pdf; Manufacturer_Name: *; Manufacturer_Part_Number: *
footprint LQFP-64_10x10mm_P0.5mm (LQFP, 64 Pin (https://www.analog.com/media/en/technical-documentation/data-sheets/ad7606_7606-6_7606-4.pdf))
part A pins: 2 OSCI (in), 3 OSCO (out), 6 REF (in), 7 DM (io), 8 DP (io), 13 TEST (in), 14 ~{RESET} (in), 16 ADBUS0 (io), 17 ADBUS1 (io), 18 ADBUS2 (io), 19 ADBUS3 (io), 21 ADBUS4 (io), 22 ADBUS5 (io), 23 ADBUS6 (io), 24 ADBUS7 (io), 26 BDBUS0 (io), 27 BDBUS1 (io), 28 BDBUS2 (io), 29 BDBUS3 (io), 30 BDBUS4 (io), 32 BDBUS5 (io), 33 BDBUS6 (io), 34 BDBUS7 (io), 36 ~{SUSPEND} (out), 38 CDBUS0 (io), 39 CDBUS1 (io), 40 CDBUS2 (io), 41 CDBUS3 (io), 43 CDBUS4 (io), 44 CDBUS5 (io), 45 CDBUS6 (io), 46 CDBUS7 (io), 48 DDBUS0 (io), 52 DDBUS1 (io), 53 DDBUS2 (io), 54 DDBUS3 (io), 55 DDBUS4 (io), 57 DDBUS5 (io), 58 DDBUS6 (io), 59 DDBUS7 (io), 60 ~{PWREN} (out), 61 EEDATA (io), 62 EECLK (out), 63 EECS (out)
part B pins: 1 GND (power), 4 VPHY (power), 5 GND (power), 9 VPLL (power), 10 AGND (power), 11 GND (power), 12 VCORE (power), 15 GND (power), 20 VCCIO (power), 25 GND (power), 31 VCCIO (power), 35 GND (power), 37 VCORE (power), 42 VCCIO (power), 47 GND (power), 49 VREGOUT (power), 50 VREGIN (power), 51 GND (power), 56 VCCIO (power), 64 VCORE (power)
part A text: FT4232H - Connectivity
part B text: FT4232H -Power

## H5ANAG6NCMR-XNC
designator U?
SK hynix 16Gb (1G x16) DDR4-3200 SDRAM, dual-die package, 96-ball FBGA, 7.5 x 13 mm, 0.8 mm pitch; source: H5ANAG6NCMR-xxC Rev 1.0 Aug 2018, page 5
footprint FBGA-96_7.5x13mm_Layout9x16_P0.8mm (FBGA-96, 8.0x14.0mm, 96 Ball, 9x16 Layout, 0.8mm Pitch, generalized from https://www.micron.com/-/media/client/global/documents/products/data-sheet/dram/ddr3/4gb_ddr3l.pdf#page=28)
part A pins: A3 DQU0 (io), A7 DQSU_c (io), B7 DQSU_t (io), B8 DQU1 (io), C2 DQU4 (io), C3 DQU2 (io), C7 DQU3 (io), C8 DQU5 (io), D3 DQU6 (io), D7 DQU7 (io), E2 DMU_n/DBIU_n (io), E7 DML_n/DBIL_n (io), E9 ZQU, F3 DQSL_c (io), F7 DQL1 (io), F9 ZQL, G2 DQL0 (io), G3 DQSL_t (io), H2 DQL4 (io), H3 DQL2 (io), H7 DQL3 (io), H8 DQL5 (io), J3 DQL6 (io), J7 DQL7 (io), K2 CKE (in), K3 ODT (in), K7 CK_t (in), K8 CK_c (in), L2 A14/WE_n (in), L3 ACT_n (in), L7 CS_n (in), L8 A16/RAS_n (in), M2 BG0 (in), M3 A10/AP (in), M7 A12/BC_n (in), M8 A15/CAS_n (in), M9 BG1 (in), N2 BA0 (in), N3 A4 (in), N7 A3 (in), N8 BA1 (in), N9 TEN (in), P1 RESET_n (in), P2 A6 (in), P3 A0 (in), P7 A1 (in), P8 A5 (in), P9 ALERT_n (out), R2 A8 (in), R3 A2 (in), R7 A9 (in), R8 A7 (in), T2 A11 (in), T3 PAR (in), T8 A13 (in)
part B pins: A1 VDDQ (power), A2 VSSQ (power), A8 VSSQ (power), A9 VDDQ (power), B1 VPP (power), B2 VSS (power), B3 VDD (power), B9 VDD (power), C1 VDDQ (power), C9 VSSQ (power), D1 VDD (power), D2 VSSQ (power), D8 VSSQ (power), D9 VDDQ (power), E1 VSS (power), E3 VSSQ (power), E8 VSSQ (power), F1 VSSQ (power), F2 VDDQ (power), F8 VDDQ (power), G1 VDDQ (power), G7 VDD (power), G8 VSS (power), G9 VDDQ (power), H1 VSSQ (power), H9 VSSQ (power), J1 VDDL (power), J2 VDDQ (power), J8 VDDQ (power), J9 VDD (power), K1 VSS (power), K9 VSS (power), L1 VDD (power), L9 VDD (power), M1 VREFCA (power), N1 VSS (power), R1 VDD (power), R9 VPP (power), T1 VSS (power), T7 VSS (power), T9 VDD (power)
part A text: DDR4 - Connectivity
part B text: DDR4 - Power

## HDMI_D_1.4
designator J?
HDMI 1.4+ type D connector; Datasheet: http://pinoutguide.com/PortableDevices/micro_hdmi_type_d_pinout.shtml; ComponentLink1Description: Datasheet; ComponentLink1URL: http://pinoutguide.com/PortableDevices/micro_hdmi_type_d_pinout.shtml
footprint HDMI_Micro-D_Molex_46765-1xxx (HDMI, Micro, Type D, THT, 0.4mm pitch, 19 ckt, right angle (http://www.molex.com/pdm_docs/sd/467651301_sd.pdf))
pins: 1 HPD/HEAC-, 2 UTILITY/HEAC+, 3 D2+, 4 D2S (power), 5 D2-, 6 D1+, 7 D1S (power), 8 D1-, 9 D0+, 10 D0S (power), 11 D0-, 12 CK+, 13 CKS (power), 14 CK-, 15 CEC (io), 16 GND (power), 17 SCL, 18 SDA (io), 19 +5V (power), SH

## HFJ11-1G01E-L12RL
designator J?
1 port RJ45 MagJack GIGABIT 1x1 Tab Down RJ45 w/mag Y/G LED 350uH min 0C ~ 70C; Manufacturer_Name: Halo Electronics; Height: 15.64; Manufacturer_Part_Number: HFJ11-1G01E-L12RL; Mouser Part Number: 493-HFJ111G01EL12RL; Mouser Price/Stock: https://www.mouser.co.uk/ProductDetail/HALO-Electronics/HFJ11-1G01E-L12RL?qs=8uu3sA0mUdsaxIpTwn1s5A%3D%3D; Datasheet: https://www.haloelectronics.com/pdf/fastjack-gigabit.pdf; ComponentLink1Description: Datasheet; ComponentLink1URL: https://www.haloelectronics.com/pdf/fastjack-gigabit.pdf
footprint HFJ111G01EL12RL (Footprint)
pins: 1 TD0+, 2 TD0-, 3 TD1+, 4 TD2+, 5 TD2-, 6 TD1-, 7 TD3+, 8 TD3-, 9 VCC, 10 GND, 11 LEDG+, 12 LEDG-, 13 LEDY+, 14 LEDY-, 15 MH1, 16 MH2

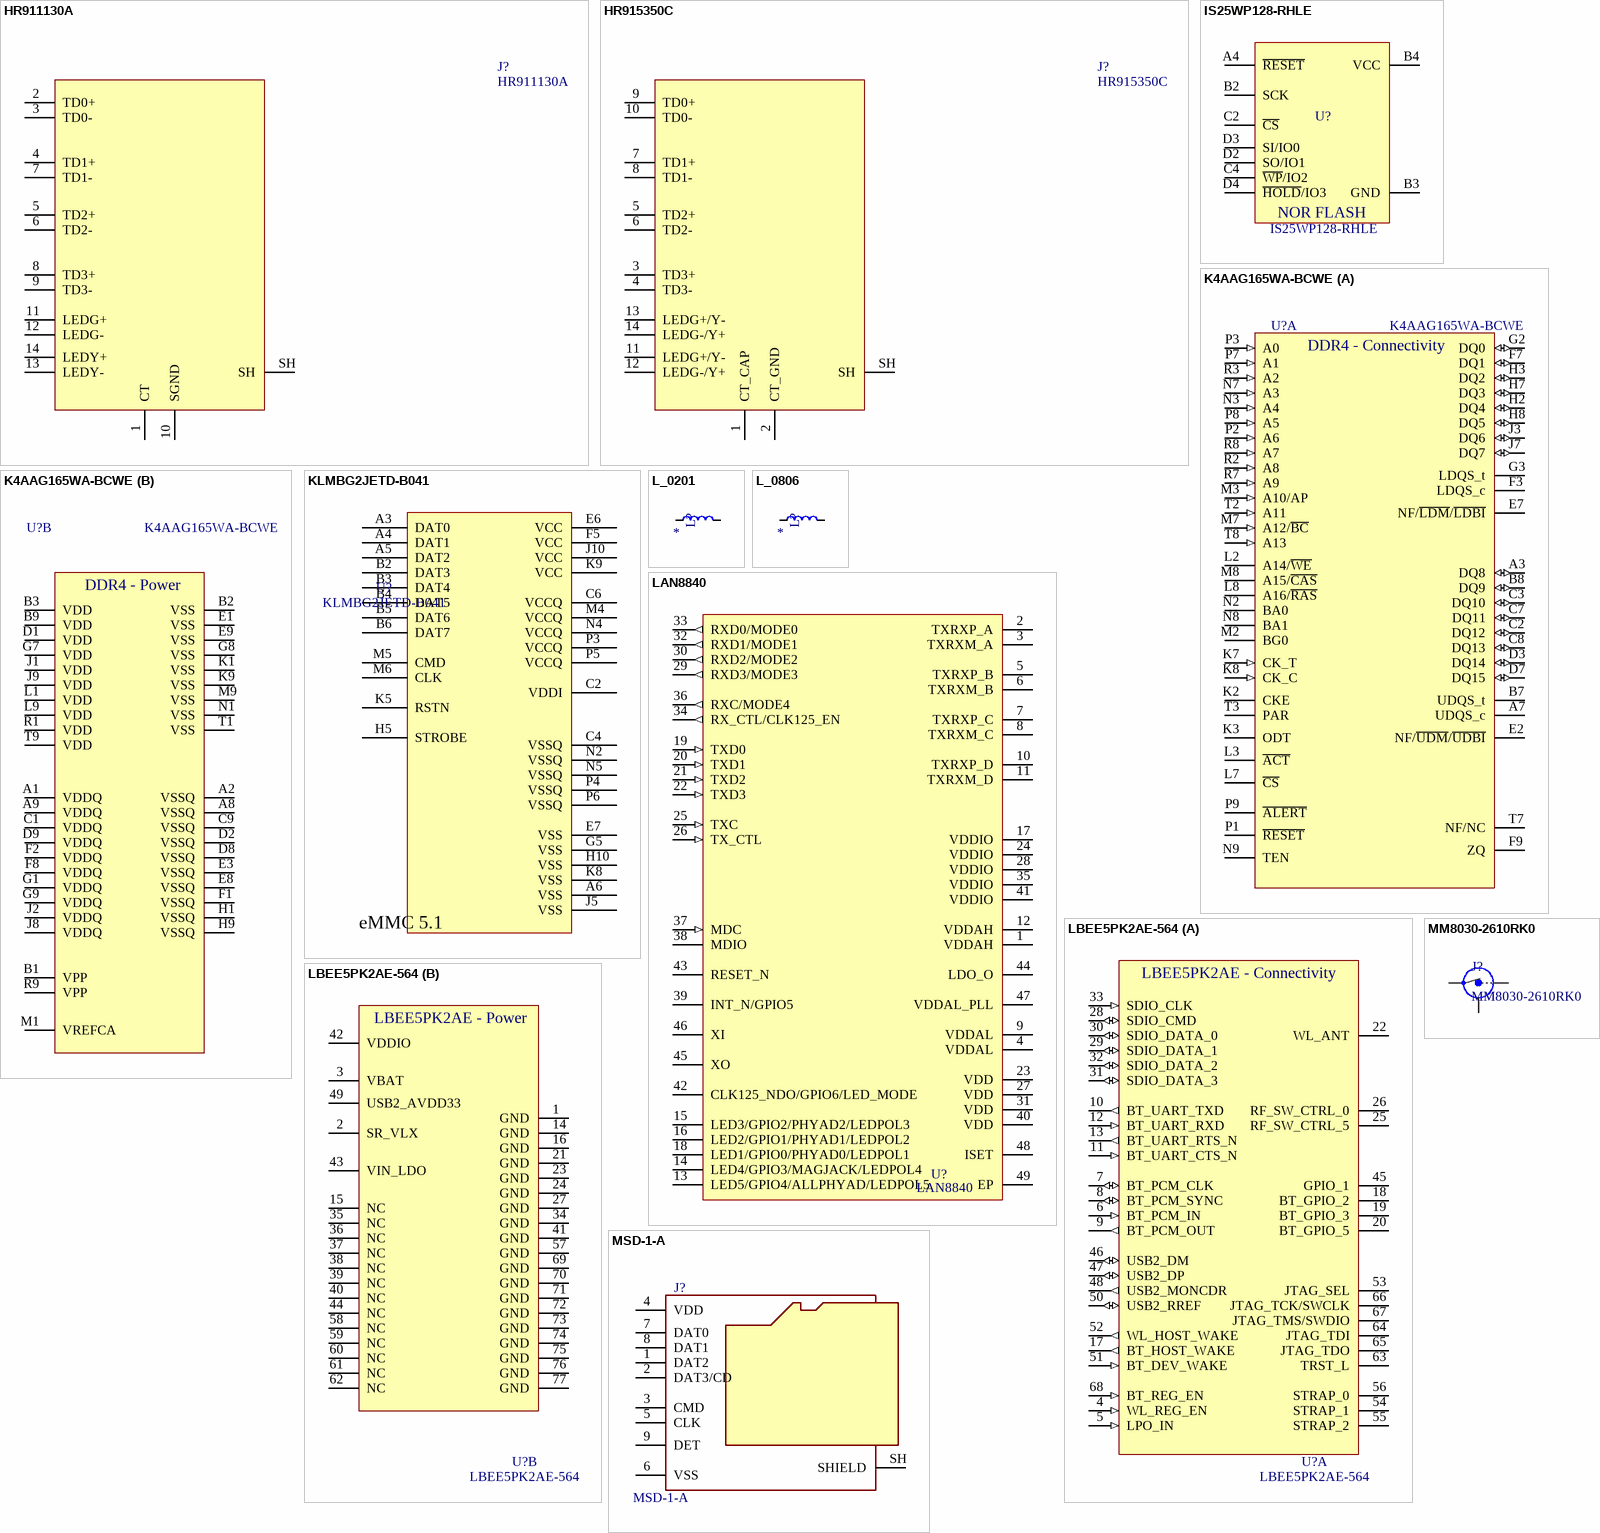
[diagram p5: symbols HR911130A to MSD-1-A]

## HR911130A
designator J?
1 port RJ45 MagJack GIGABIT Right Angle Shielded With Contact Spring With LED; Manufacturer_Name: HANRUN(Zhongshan HanRun Elec); Manufacturer_Part_Number: HR915350C; Height: 13.55
footprint HR911130A
pins: 1 CT, 2 TD0+, 3 TD0-, 4 TD1+, 5 TD2+, 6 TD2-, 7 TD1-, 8 TD3+, 9 TD3-, 10 SGND, 11 LEDG+, 12 LEDG-, 13 LEDY-, 14 LEDY+, SH

## HR915350C
designator J?
1 port RJ45 MagJack GIGABIT Right Angle Shielded With Contact Spring With LED; Manufacturer_Name: HANRUN(Zhongshan HanRun Elec); Height: 13.55; Manufacturer_Part_Number: HR915350C
footprint HR915350C
pins: 1 CT_CAP, 2 CT_GND, 3 TD3+, 4 TD3-, 5 TD2+, 6 TD2-, 7 TD1+, 8 TD1-, 9 TD0+, 10 TD0-, 11 LEDG+/Y-, 12 LEDG-/Y+, 13 LEDG+/Y-, 14 LEDG-/Y+, SH

## IS25WP128-RHLE
designator U?
128Mbit 1.65V~1.95V 133MHz SPI TFBGA-24(6x8) Memory RoHS; Manufacturer_Name: *; Manufacturer_Part_Number: *; Value: IS25WP128-RHLE
footprint IS25WP128-RHLE
pins: A4 ~{RESET}, B2 SCK, B3 GND, B4 VCC, C2 ~{CS}, C4 ~{WP}/IO2, D2 SO/IO1, D3 SI/IO0, D4 ~{HOLD}/IO3
text: NOR FLASH

## K4AAG165WA-BCWE
designator U?
1G x 16-bit (16 Gbit) CMOS Double Data Rate IV Synchronous RAM, FBGA-96; KiCad_Footprint: Package_BGA:Samsung_FBGA-96_8x14mm_Layout9x16_P0.8mm; Datasheet: https://www.alldatasheet.com/datasheet-pdf/pdf/1643784/SAMSUNG/K4AAG165WA-BCWE.html; ComponentLink1Description: Datasheet; ComponentLink1URL: https://www.alldatasheet.com/datasheet-pdf/pdf/1643784/SAMSUNG/K4AAG165WA-BCWE.html; Manufacturer_Name: *; Manufacturer_Part_Number: *
footprint FBGA-96_8x14mm_Layout9x16_P0.8mm (FBGA-96, 8.0x14.0mm, 96 Ball, 9x16 Layout, 0.8mm Pitch, generalized from https://www.micron.com/-/media/client/global/documents/products/data-sheet/dram/ddr3/4gb_ddr3l.pdf#page=28)
part A pins: A3 DQ8 (io), A7 UDQS_c, B7 UDQS_t, B8 DQ9 (io), C2 DQ12 (io), C3 DQ10 (io), C7 DQ11 (io), C8 DQ13 (io), D3 DQ14 (io), D7 DQ15 (io), E2 NF/~{UDM}/~{UDBI}, E7 NF/~{LDM}/~{LDBI}, F3 LDQS_c, F7 DQ1 (io), F9 ZQ, G2 DQ0 (io), G3 LDQS_t, H2 DQ4 (io), H3 DQ2 (io), H7 DQ3 (io), H8 DQ5 (io), J3 DQ6 (io), J7 DQ7 (io), K2 CKE, K3 ODT, K7 CK_T (in), K8 CK_C (in), L2 A14/~{WE}, L3 ~{ACT}, L7 ~{CS}, L8 A16/~{RAS}, M2 BG0, M3 A10/AP (in), M7 A12/~{BC} (in), M8 A15/~{CAS}, N2 BA0, N3 A4 (in), N7 A3 (in), N8 BA1, N9 TEN, P1 ~{RESET}, P2 A6 (in), P3 A0 (in), P7 A1 (in), P8 A5 (in), P9 ~{ALERT} (oc), R2 A8 (in), R3 A2 (in), R7 A9 (in), R8 A7 (in), T2 A11 (in), T3 PAR, T7 NF/NC, T8 A13 (in)
part B pins: A1 VDDQ (power), A2 VSSQ (power), A8 VSSQ, A9 VDDQ, B1 VPP (power), B2 VSS (power), B3 VDD, B9 VDD (power), C1 VDDQ, C9 VSSQ, D1 VDD, D2 VSSQ, D8 VSSQ, D9 VDDQ, E1 VSS, E3 VSSQ, E8 VSSQ, E9 VSS, F1 VSSQ, F2 VDDQ, F8 VDDQ, G1 VDDQ, G7 VDD, G8 VSS, G9 VDDQ, H1 VSSQ, H9 VSSQ, J1 VDD, J2 VDDQ, J8 VDDQ, J9 VDD, K1 VSS, K9 VSS, L1 VDD, L9 VDD, M1 VREFCA, M9 VSS, N1 VSS, R1 VDD, R9 VPP, T1 VSS, T9 VDD
part A text: DDR4 - Connectivity
part B text: DDR4 - Power

## KLMBG2JETD-B041
designator U?
Samsung eMMC 5.1, 32GB, NAND flash + MMC controller, HS400 capable, FBGA-153; KiCad_Footprint: Package_BGA:Samsung_FBGA-153_11.5x13mm_Layout14x14_P0.5mm; Datasheet: https://www.lcsc.com/datasheet/C2803245.pdf; ComponentLink1Description: Datasheet; ComponentLink1URL: https://www.lcsc.com/datasheet/C2803245.pdf; Manufacturer_Name: *; Manufacturer_Part_Number: *
footprint LFBGA-153_11.5x13mm_Layout14x14_P0.5mm (JEDEC eMMC AN BGA-153, 11.5x13.0mm, 153 Ball, 14x14 Layout, 0.5mm Pitch, https://www.jedec.org/sites/default/files/docs/MO-276F.pdf)
pins: A3 DAT0, A4 DAT1, A5 DAT2, A6 VSS, B2 DAT3, B3 DAT4, B4 DAT5, B5 DAT6, B6 DAT7, C2 VDDI, C4 VSSQ, C6 VCCQ, E6 VCC, E7 VSS, F5 VCC, G5 VSS, H5 STROBE, H10 VSS, J5 VSS, J10 VCC, K5 RSTN, K8 VSS, K9 VCC, M4 VCCQ, M5 CMD, M6 CLK, N2 VSSQ, N4 VCCQ, N5 VSSQ, P3 VCCQ, P4 VSSQ, P5 VCCQ, P6 VSSQ
text: eMMC 5.1

## L_0201
designator L?, comment L  (value not drawn)
Inductor; Manufacturer_Name: *; Manufacturer_Part_Number: *; Value: *
footprint FB0201
pins: 1, 2

## L_0806
designator L?, comment L  (value not drawn)
Inductor; Manufacturer_Name: *; Manufacturer_Part_Number: *; Value: *
pins: 1, 2

## LAN8840
designator U?
Gigabit Ethernet Transceiver with RGMII Interface and IEEE 1588v2 Support, VQFN-48; Datasheet: https://ww1.microchip.com/downloads/aemDocuments/documents/UNG/ProductDocuments/DataSheets/LAN8840-Data-Sheet-DS00004727.pdf; ComponentLink1Description: Datasheet; ComponentLink1URL: https://ww1.microchip.com/downloads/aemDocuments/documents/UNG/ProductDocuments/DataSheets/LAN8840-Data-Sheet-DS00004727.pdf; Manufacturer_Name: *; Manufacturer_Part_Number: *
footprint QFN-48-1EP_7x7mm_P0.5mm_EP5.15x5.15mm (Footprint)
pins: 1 VDDAH, 2 TXRXP_A, 3 TXRXM_A, 4 VDDAL, 5 TXRXP_B, 6 TXRXM_B, 7 TXRXP_C, 8 TXRXM_C, 9 VDDAL, 10 TXRXP_D, 11 TXRXM_D, 12 VDDAH, 13 LED5/GPIO4/ALLPHYAD/LEDPOL5, 14 LED4/GPIO3/MAGJACK/LEDPOL4, 15 LED3/GPIO2/PHYAD2/LEDPOL3, 16 LED2/GPIO1/PHYAD1/LEDPOL2, 17 VDDIO, 18 LED1/GPIO0/PHYAD0/LEDPOL1, 19 TXD0 (in), 20 TXD1 (in), 21 TXD2 (in), 22 TXD3 (in), 23 VDD, 24 VDDIO, 25 TXC (in), 26 TX_CTL (in), 27 VDD, 28 VDDIO, 29 RXD3/MODE3 (out), 30 RXD2/MODE2 (out), 31 VDD, 32 RXD1/MODE1 (out), 33 RXD0/MODE0 (out), 34 RX_CTL/CLK125_EN (out), 35 VDDIO, 36 RXC/MODE4 (out), 37 MDC (in), 38 MDIO, 39 INT_N/GPIO5, 40 VDD, 41 VDDIO, 42 CLK125_NDO/GPIO6/LED_MODE, 43 RESET_N, 44 LDO_O, 45 XO, 46 XI, 47 VDDAL_PLL, 48 ISET, 49 EP

## LBEE5PK2AE-564
designator U?
Murata Type 2AE Wi-Fi 802.11a/b/g/n/ac + Bluetooth 5.2 combo module, Infineon CYW4373E, SDIO/USB host interface, 8.0x7.8mm LGA-77; KiCad_Footprint: RF_Module:Murata_LBEE5PK2AE-564; Datasheet: https://www.murata.com/products/productdata/8816428220446/type2ae.pdf; ComponentLink1Description: Datasheet; ComponentLink1URL: https://www.murata.com/products/productdata/8816428220446/type2ae.pdf; Manufacturer_Name: Murata; Manufacturer_Part_Number: LBEE5PK2AE-564
footprint LBEE5PK2AE-564
part A pins: 4 WL_REG_EN (in), 5 LPO_IN (in), 6 BT_PCM_IN (in), 7 BT_PCM_CLK (io), 8 BT_PCM_SYNC (io), 9 BT_PCM_OUT (out), 10 BT_UART_TXD (out), 11 BT_UART_CTS_N (in), 12 BT_UART_RXD (in), 13 BT_UART_RTS_N (out), 17 BT_HOST_WAKE (out), 18 BT_GPIO_2, 19 BT_GPIO_3, 20 BT_GPIO_5, 22 WL_ANT, 25 RF_SW_CTRL_5, 26 RF_SW_CTRL_0, 28 SDIO_CMD (io), 29 SDIO_DATA_1 (io), 30 SDIO_DATA_0 (io), 31 SDIO_DATA_3 (io), 32 SDIO_DATA_2 (io), 33 SDIO_CLK (in), 45 GPIO_1, 46 USB2_DM (io), 47 USB2_DP (io), 48 USB2_MONCDR (out), 50 USB2_RREF (io), 51 BT_DEV_WAKE (in), 52 WL_HOST_WAKE (out), 53 JTAG_SEL, 54 STRAP_1, 55 STRAP_2, 56 STRAP_0, 63 TRST_L, 64 JTAG_TDI, 65 JTAG_TDO, 66 JTAG_TCK/SWCLK, 67 JTAG_TMS/SWDIO, 68 BT_REG_EN (in)
part B pins: 1 GND (power), 2 SR_VLX (power), 3 VBAT (power), 14 GND (power), 15 NC, 16 GND (power), 21 GND (power), 23 GND (power), 24 GND (power), 27 GND (power), 34 GND (power), 35 NC, 36 NC, 37 NC, 38 NC, 39 NC, 40 NC, 41 GND (power), 42 VDDIO (power), 43 VIN_LDO (power), 44 NC, 49 USB2_AVDD33 (power), 57 GND (power), 58 NC, 59 NC, 60 NC, 61 NC, 62 NC, 69 GND (power), 70 GND (power), 71 GND (power), 72 GND (power), 73 GND (power), 74 GND (power), 75 GND (power), 76 GND (power), 77 GND (power)
part A text: LBEE5PK2AE - Connectivity
part B text: LBEE5PK2AE - Power

## MM8030-2610RK0
designator J?
SWG Connector Receptacle, Female Socket 50 Ohms Surface Mount Solder; Manufacturer_Name: *; Manufacturer_Part_Number: *; Value: MM8030-2610RK0
footprint COAXIAL-SWG
pins: 1 IN, 2,4 GND, 3 OUT

## MSD-1-A
designator J?
Micro SD Card Socket with one card detection pin; Manufacturer_Name: CUI; ComponentLink1Description: Datasheet; ComponentLink1URL: https://datasheet.lcsc.com/lcsc/2110151630_XKB-Connectivity-XKTF-015-N_C381082.pdf; Manufacturer_Part_Number: MSD-1-A; Value: MSD-1-A
footprint MSD-1-A
pins: 1 DAT2, 2 DAT3/CD, 3 CMD, 4 VDD (power), 5 CLK, 6 VSS (power), 7 DAT0, 8 DAT1, 9 DET, SH SHIELD

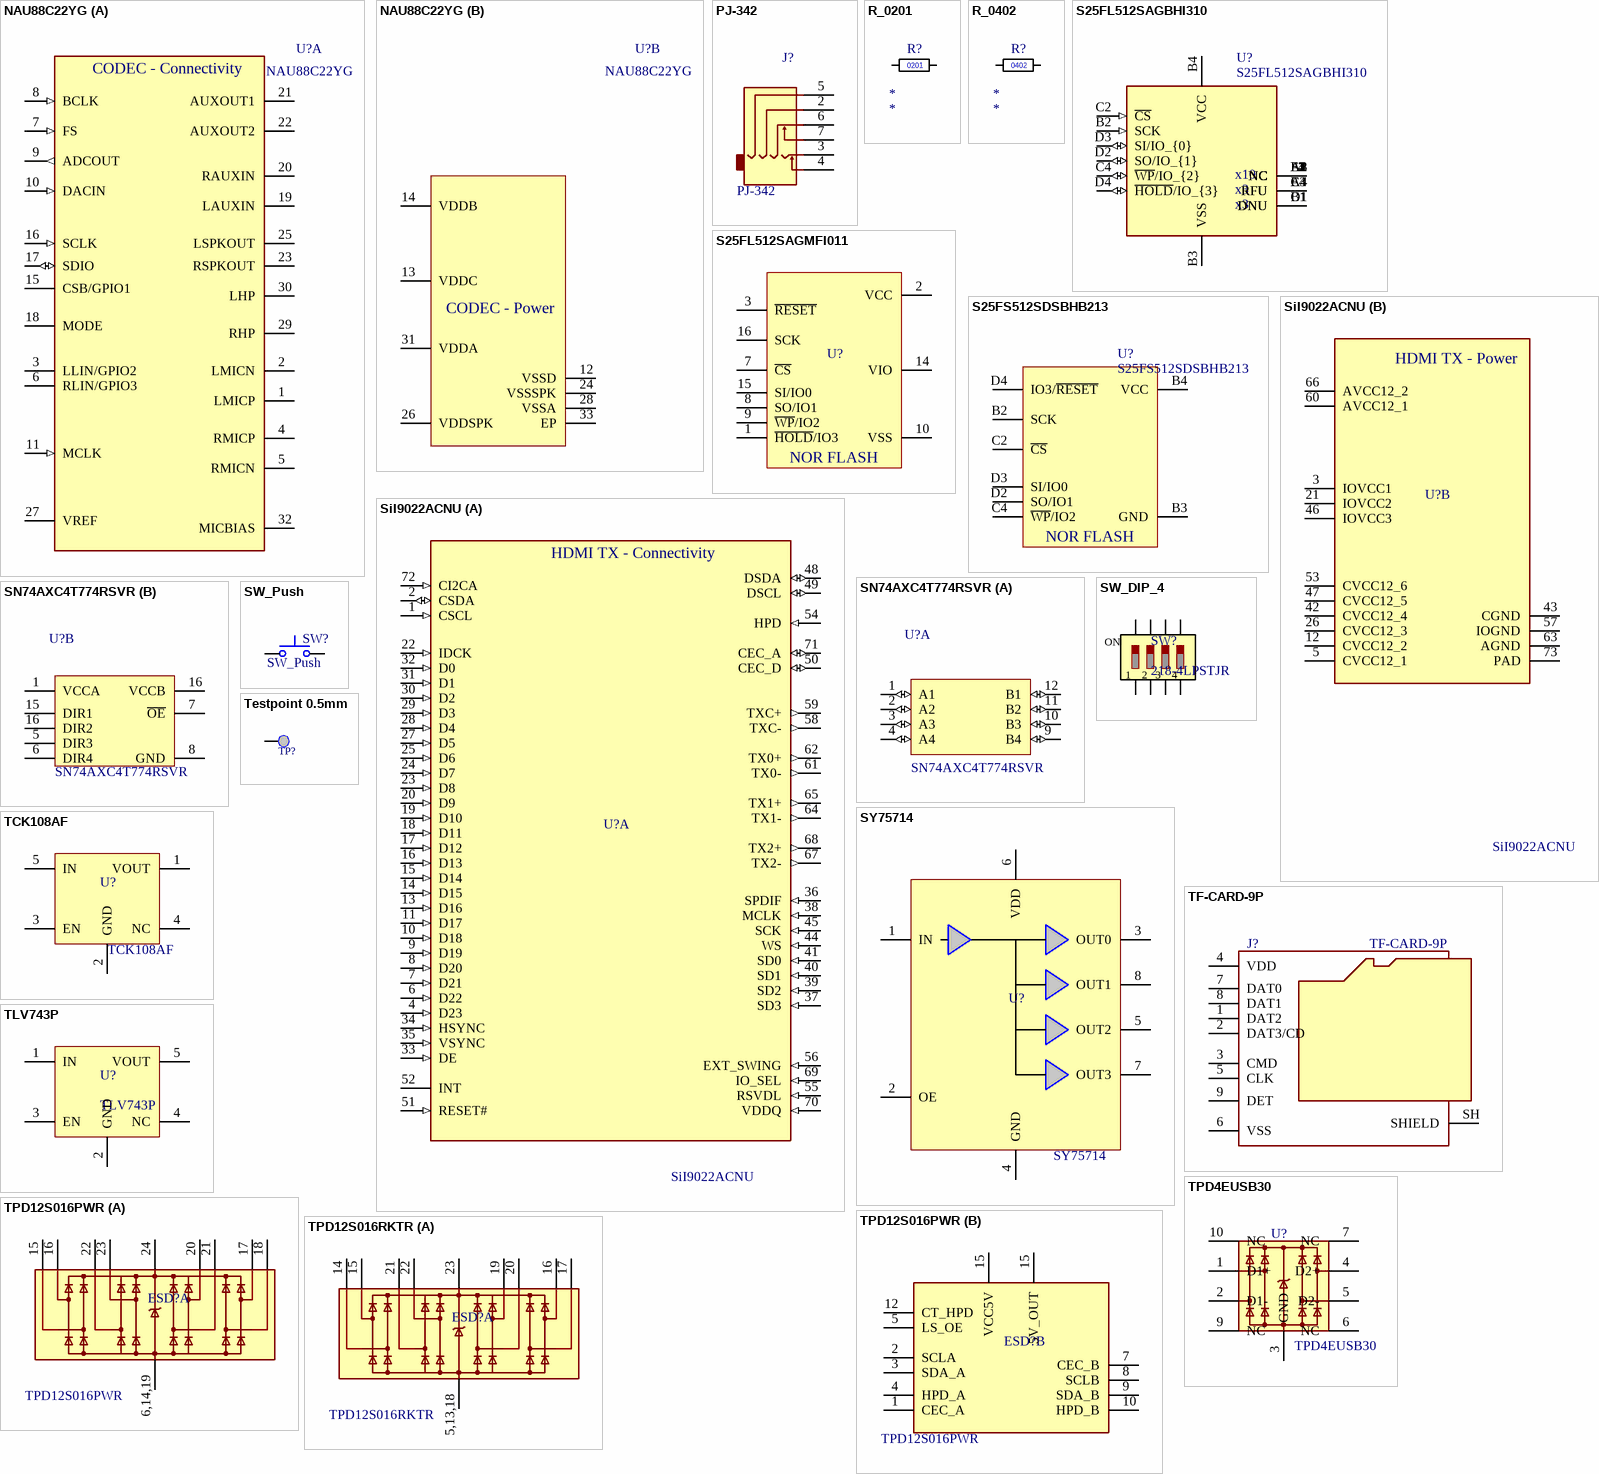
[diagram p6: symbols NAU88C22YG to TPD12S016RKTR]

## NAU88C22YG
designator U?
Audio CODEC 24 b I2S, PCM; Datasheet: https://datasheetspdf.com/pdf-file/1134755/nuvoton/NAU88C22/1; ComponentLink1Description: Datasheet; ComponentLink1URL: https://datasheetspdf.com/pdf-file/1134755/nuvoton/NAU88C22/1; Manufacturer_Name: *; Manufacturer_Part_Number: *
footprint VQFN-32-1EP_5x5mm_P0.5mm_EP3.5x3.5mm (Footprint)
part A pins: 1 LMICP, 2 LMICN, 3 LLIN/GPIO2, 4 RMICP, 5 RMICN, 6 RLIN/GPIO3, 7 FS (in), 8 BCLK (in), 9 ADCOUT (out), 10 DACIN (in), 11 MCLK (in), 15 CSB/GPIO1, 16 SCLK (in), 17 SDIO (io), 18 MODE, 19 LAUXIN, 20 RAUXIN, 21 AUXOUT1, 22 AUXOUT2, 23 RSPKOUT, 25 LSPKOUT, 27 VREF (power), 29 RHP, 30 LHP, 32 MICBIAS
part B pins: 12 VSSD (power), 13 VDDC (power), 14 VDDB (power), 24 VSSSPK (power), 26 VDDSPK (power), 28 VSSA (power), 31 VDDA (power), 33 EP (power)
part A text: CODEC - Connectivity
part B text: CODEC - Power

## PJ-342
designator J?
3.5mm Headphone Jack 30V 500mA Copper Gold SMD Audio Connectors ROHS; Manufacturer_Name: SHOU HAN; Manufacturer_Part_Number: PJ-342; Value: PJ-342
footprint PJ-342
pins: 2 R2, 3 T, 4 TN, 5, 6 R1, 7 R1N

## R_0201
designator R?, comment 0201  (value not drawn)
Manufacturer_Name: *; Manufacturer_Part_Number: *; Tolerance: *; Value: *
footprint R0201
pins: 1, 2

## R_0402
designator R?, comment 0402  (value not drawn)
Manufacturer_Name: *; Manufacturer_Part_Number: *; Tolerance: *; Value: *
footprint R0402
pins: 1, 2

## S25FL512SAGBHI310
designator U?
512Mbit / 64MiB NOR Flash, 2.7-3.6V, SPI/Dual/Quad, FAC024 4x6, 6x8mm, 1mm pitch, model 31 without separate RESET or VIO, -40 to +85C; Footprint_Note: Unassigned: requires FAC024 / 002-15535, 24-ball 4x6, 6x8mm, 1.0mm pitch. No matching installed footprint found.; Datasheet: https://www.infineon.com/dgdl/Infineon-S25FL512S_512_Mb_(64_MB)_3.0_V_SPI_Flash_Memory-DataSheet-v20_00-EN.pdf?fileId=8ac78c8c7d0d8da4017d0ed046ae4b53; ComponentLink1Description: Datasheet; ComponentLink1URL: https://www.infineon.com/dgdl/Infineon-S25FL512S_512_Mb_(64_MB)_3.0_V_SPI_Flash_Memory-DataSheet-v20_00-EN.pdf?fileId=8ac78c8c7d0d8da4017d0ed046ae4b53
pins: A1 NC, A2 NC, A3 NC, A4 RFU, B1 DNU, B2 SCK (in), B3 VSS (power), B4 VCC (power), C1 DNU, C2 ~{CS} (in), C3 RFU, C4 ~{WP}/IO_{2} (io), D1 DNU, D2 SO/IO_{1} (io), D3 SI/IO_{0} (io), D4 ~{HOLD}/IO_{3} (io), E1 NC, E2 NC, E3 NC, E4 RFU, F1 NC, F2 NC, F3 NC, F4 NC
text: x10; x3

## S25FL512SAGMFI011
designator U?  (value not drawn)
512Mbit / 64MiB NOR FLASH -40℃~+85℃ 100,000 cycles 133MHz 2.7V~3.6V 20 Years 340us 512Mbit 70uA SPI SOIC-16-300mil; Manufacturer_Name: *; Manufacturer_Part_Number: *
pins: 1 ~{HOLD}/IO3, 2 VCC, 3 ~{RESET}, 7 ~{CS}, 8 SO/IO1, 9 ~{WP}/IO2, 10 VSS, 14 VIO, 15 SI/IO0, 16 SCK
text: NOR FLASH

## S25FS512SDSBHB213
designator U?
512Mbit / 64MiB NOR Flash, 1.7-2.0V, SPI/Dual/Quad/QPI, FAB024 5x5 minus A1, 6x8mm, 1mm pitch, automotive -40 to +105C; KiCad_Footprint: Package_BGA:BGA-24_6x8mm_Layout5x5_P1.0mm; Datasheet: https://www.infineon.com/assets/row/public/documents/10/49/infineon-s25fs512s-512-mb-1-datasheet-en.pdf; ComponentLink1Description: Datasheet; ComponentLink1URL: https://www.infineon.com/assets/row/public/documents/10/49/infineon-s25fs512s-512-mb-1-datasheet-en.pdf; Manufacturer_Name: *; Manufacturer_Part_Number: *
footprint BGA-24_6x8mm_Layout5x5_P1.0mm (Footprint)
pins: B2 SCK, B3 GND, B4 VCC, C2 ~{CS}, C4 ~{WP}/IO2, D2 SO/IO1, D3 SI/IO0, D4 IO3/~{RESET}
text: NOR FLASH

## SiI9022ACNU
designator U?
HDMI 1.4 transmitter with 24-bit parallel video; Manufacturer_Name: Lattice; Manufacturer_Part_Number: SiI9022ACNU; Value: SiI9022ACNU
footprint QFN-72-1EP_10x10mm_P0.5mm_EP4.7x4.7mm (QFN, 72 Pin (http://ww1.microchip.com/downloads/en/DeviceDoc/00001682C.pdf#page=70))
part A pins: 1 CSCL (in), 2 CSDA (io), 4 D23 (in), 6 D22 (in), 7 D21 (in), 8 D20 (in), 9 D19 (in), 10 D18 (in), 11 D17 (in), 13 D16 (in), 14 D15 (in), 15 D14 (in), 16 D13 (in), 17 D12 (in), 18 D11 (in), 19 D10 (in), 20 D9 (in), 22 IDCK (in), 23 D8 (in), 24 D7 (in), 25 D6 (in), 27 D5 (in), 28 D4 (in), 29 D3 (in), 30 D2 (in), 31 D1 (in), 32 D0 (in), 33 DE (in), 34 HSYNC (in), 35 VSYNC (in), 36 SPDIF (in), 37 SD3 (in), 38 MCLK (in), 39 SD2 (in), 40 SD1 (in), 41 SD0 (in), 44 WS (in), 45 SCK (in), 48 DSDA (io), 49 DSCL (io), 50 CEC_D (io), 51 RESET# (in), 52 INT (oc), 54 HPD (in), 55 RSVDL (in), 56 EXT_SWING (in), 58 TXC- (out), 59 TXC+ (out), 61 TX0- (out), 62 TX0+ (out), 64 TX1- (out), 65 TX1+ (out), 67 TX2- (out), 68 TX2+ (out), 69 IO_SEL (in), 70 VDDQ (in), 71 CEC_A (io), 72 CI2CA (in)
part B pins: 3 IOVCC1 (power), 5 CVCC12_1 (power), 12 CVCC12_2 (power), 21 IOVCC2 (power), 26 CVCC12_3 (power), 42 CVCC12_4 (power), 43 CGND (power), 46 IOVCC3 (power), 47 CVCC12_5 (power), 53 CVCC12_6 (power), 57 IOGND (power), 60 AVCC12_1 (power), 63 AGND (power), 66 AVCC12_2 (power), 73 PAD (power)
part A text: HDMI TX - Connectivity
part B text: HDMI TX - Power

## SN74AXC4T774RSVR
designator U?
4-Bit Dual-Supply Bus Transceiver With Configurable Voltage Translation and 3-State Outputs, 16-UQFN (2.6x1.8); Manufacturer_Name: Texas Instruments; Datasheet: https://www.ti.com/lit/ds/symlink/sn74axc4t774.pdf?HQS=dis-dk-null-digikeymode-dsf-pf-null-wwe&ts=1791191909639&ref_url=https%253A%252F%252Fwww.ti.com%252Fgeneral%252Fdocs%252Fsuppproductinfo.tsp%253FdistId%253D10%2526gotoUrl%253Dhttps%253A%252F%252Fwww.ti.com%252Flit%252Fgpn%252Fsn74axc4t774; Manufacturer_Part_Number: SN74AXC4T774RSVR; Value: SN74AXC4T774RSVR
footprint UQFN-16_1.8x2.6mm_P0.4mm (UQFN, 16 Pin (https://www.ti.com/lit/ml/qfnd836/qfnd836.pdf))
part A pins: 1 A1 (io), 2 A2 (io), 3 A3 (io), 4 A4 (io), 9 B4 (io), 10 B3 (io), 11 B2 (io), 12 B1 (io)
part B pins: 1 VCCA (power), 5 DIR3, 6 DIR4, 7 ~{OE}, 8 GND (power), 15 DIR1, 16 DIR2, 16 VCCB (power)

## SW_DIP_4
designator SW?, comment 218-4LPSTJR
Manufacturer_Name: CTS Electrocomponents; Manufacturer_Part_Number: 218-4LPSTJR
footprint SW_DIP_SPSTx04_Slide (SMD 4x-dip-switch SPST P1.27mm)
pins: 1, 2, 3, 4, 5, 6, 7, 8
text: ON

## SW_Push
designator SW?
Push button switch, generic, two pins
pins: 1, 2

## SY75714
designator U?
Clock Clock Buffer IC 1:4 250 MHz 8-WFDFN Exposed Pad; Manufacturer_Name: *; Manufacturer_Part_Number: *; Value: SY75714
footprint TDFN-8-2x2mm_P0.5mm
pins: 1 IN, 2 OE, 3 OUT0, 4 GND (power), 5 OUT2, 6 VDD (power), 7 OUT3, 8 OUT1

## TCK108AF
designator U?
Load Switch 1.1V~5.5V 1A 63mΩ Active Low  SC-74A(SOT-753) Power Distribution Switches ROHS; Manufacturer_Name: TOSHIBA; Manufacturer_Part_Number: TCK108AF,LF; Value: TCK108AF
pins: 1 VOUT, 2 GND, 3 EN, 4 NC, 5 IN

## Testpoint 0.5mm
designator TP?  (value not drawn)  (no BOM)
footprint TP_0.50mm (Testpoint 0.50mm diameter)
pins: TP

## TF-CARD-9P
designator J?
Micro SD Card Socket with one card detection pin; Manufacturer_Name: BXCONN; Datasheet: https://datasheet.lcsc.com/lcsc/2110151630_XKB-Connectivity-XKTF-015-N_C381082.pdf; ComponentLink1Description: Datasheet; ComponentLink1URL: https://datasheet.lcsc.com/lcsc/2110151630_XKB-Connectivity-XKTF-015-N_C381082.pdf; Manufacturer_Part_Number: TF-CARD-9P
pins: 1 DAT2, 2 DAT3/CD, 3 CMD, 4 VDD (power), 5 CLK, 6 VSS (power), 7 DAT0, 8 DAT1, 9 DET, SH SHIELD

## TLV743P
designator U?
Linear Voltage Regulator IC Positive Fixed 1 Output 300mA SOT-23-5; Manufacturer_Name: Texas Instruments; Manufacturer_Part_Number: TLV74311PDBVR; Value: TLV74311PDBVR
footprint SOT-23-5 (TI SOT-23-5)
pins: 1 IN, 2 GND, 3 EN, 4 NC, 5 VOUT

## TPD4EUSB30
designator U?
4-Channel ESD Protection for Super-Speed USB 3.0 Interface, USON-10; KiCad_Footprint: Package_SON:USON-10_2.5x1.0mm_P0.5mm; Datasheet: http://www.ti.com/lit/ds/symlink/tpd2eusb30a.pdf; ComponentLink1Description: Datasheet; ComponentLink1URL: http://www.ti.com/lit/ds/symlink/tpd2eusb30a.pdf
footprint USON-10_2.5x1.0mm_P0.5mm (Footprint)
pins: 1 D1+, 2 D1-, 3 GND (power), 4 D2+, 5 D2-, 6 NC, 7 NC, 8 GND, 9 NC, 10 NC

## TPD12S016PWR
designator ESD?
HDMI TSSOP-24 Interface 3.4Gbps 4.5V~5.5V I2C; Manufacturer_Name: Texas Instrument; Manufacturer_Part_Number: TPD12S016PWR; Value: TPD12S016PWR
footprint TSOP65P640X120-24N (TSOP, 24-Leads, Body 7.80x4.40mm, Pitch 0.65mm, IPC Medium Density)
part A pins: 6,14,19 GND (power), 15 CLK-, 16 CLK+, 17 D0-, 18 D0+, 20 D1-, 21 D1+, 22 D2-, 23 D2+, 24 VCCA
part B pins: 1 CEC_A, 2 SCLA, 3 SDA_A, 4 HPD_A, 5 LS_OE, 7 CEC_B, 8 SCLB, 9 SDA_B, 10 HPD_B, 12 CT_HPD, 15 VCC5V, 15 5V_OUT

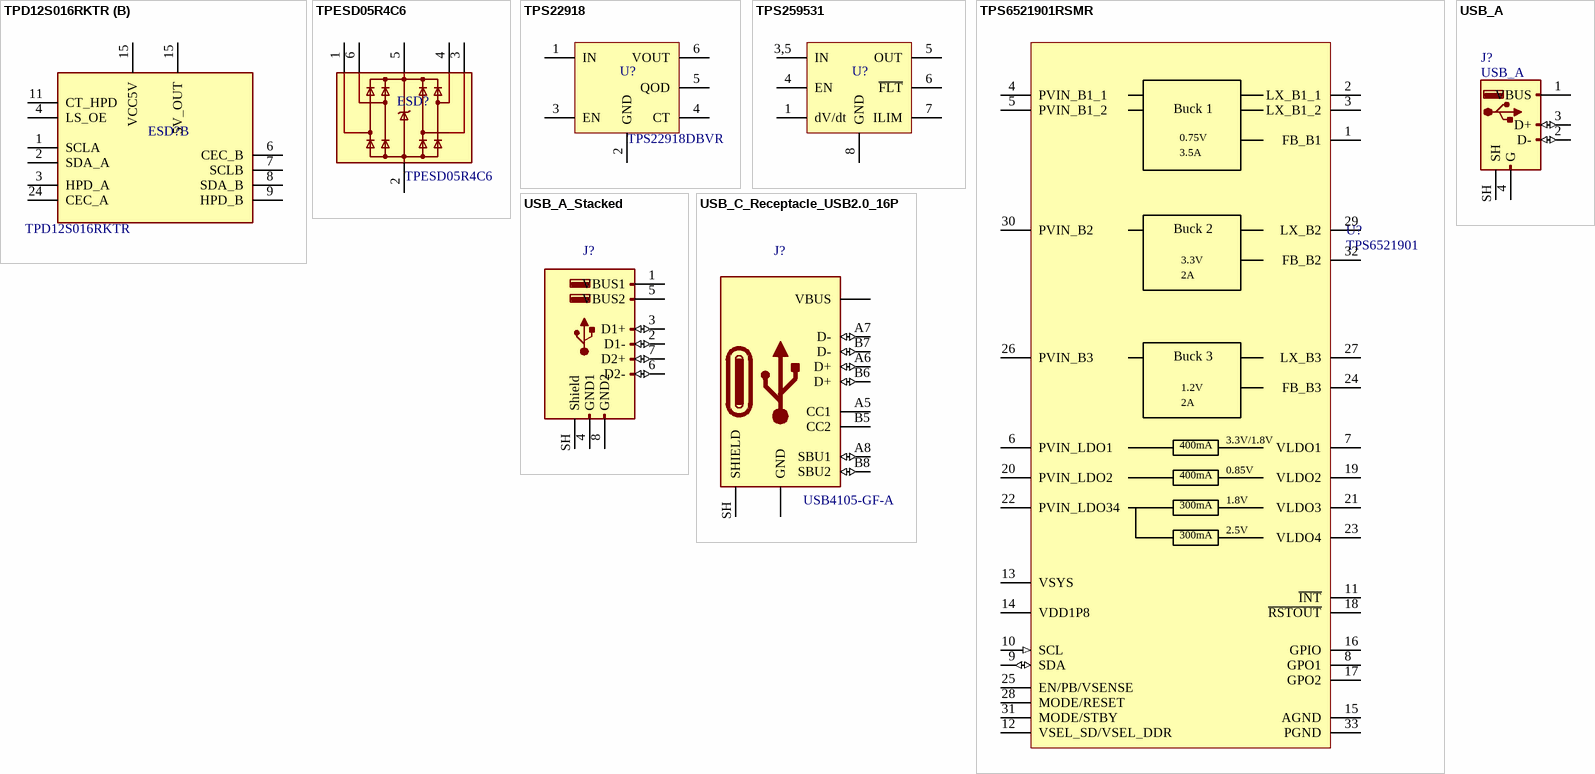
[diagram p7: symbols TPD12S016RKTR to USB_C_Receptacle_USB2.0_16P]

## TPD12S016RKTR
designator ESD?
HDMI  UQFN-24(2x4) Interface 3.4Gbps 4.5V~5.5V I2C; Manufacturer_Name: Texas Instrument; Manufacturer_Part_Number: TPD12S016RKTR; Value: TPD12S016RKTR
footprint UQFN40P200X400X55-24N (QFN, 24-Leads, Body 2.00x4.00mm, Pitch 0.40mm, IPC Medium Density)
part A pins: 5,13,18 GND (power), 14 CLK-, 15 CLK+, 16 D0-, 17 D0+, 19 D1-, 20 D1+, 21 D2-, 22 D2+, 23 VCCA
part B pins: 1 SCLA, 2 SDA_A, 3 HPD_A, 4 LS_OE, 6 CEC_B, 7 SCLB, 8 SDA_B, 9 HPD_B, 11 CT_HPD, 15 VCC5V, 15 5V_OUT, 24 CEC_A

## TPESD05R4C6
designator ESD?
ESD and Surge Protection (TVS/ESD) 1.3pF 5V 5uA 6.5A@8/20us 9V 9V Four channels SOT-363  ROHS; Manufacturer_Name: TECH PUBLIC; Manufacturer_Part_Number: TPESD05R4C6; Value: TPESD05R4C6
footprint TPESD05R4C6
pins: 1, 2 (power), 3, 4, 5, 6

## TPS22918
designator U?  value TPS22918DBVR  (hidden comment: TPS22918)
Load Switch -40℃~+105℃ 1 1V~5.5V 2A 53mΩ Active High SOT-23-6 Power Distribution Switches ROHS; Manufacturer_Name: Texas Instruments; Manufacturer_Part_Number: TPS22918DBVR
footprint SOT-23-6 (TI SOT-23-6)
pins: 1 IN, 2 GND, 3 EN, 4 CT, 5 QOD, 6 VOUT

## TPS259531
designator U?  (value not drawn)
E-Fuse 34mΩ Integrated FET Surface Mount WSON-8-EP(2x2); Manufacturer_Name: Texas Instruments; Manufacturer_Part_Number: TPS259531DSGR; Value: TPS259531
footprint TPS259531
pins: 1 dV/dt, 3,5 IN, 4 EN, 5 OUT, 6 ~{FLT}, 7 ILIM, 8 GND

## TPS6521901RSMR
designator U?, comment TPS6521901
PMIC, 3 bucks + 4 LDOs, I2C, NVM 07, 4x4mm RHB VQFN-32 plus exposed PGND pad 33; MPN: TPS6521901RSMR; Footprint_Note: Generic footprint candidate: 5x5mm, 0.5mm pitch, EP3.7mm. Exists locally; pad lengths differ from TI RHB0032W recommended land pattern. Review before PCB fabrication.; Datasheet: https://www.ti.com/lit/ds/symlink/tps65219.pdf; ComponentLink1Description: Datasheet; ComponentLink1URL: https://www.ti.com/lit/ds/symlink/tps65219.pdf
footprint QFN-32-1EP_5x5mm_P0.5mm_EP3.7x3.7mm (Footprint)
pins: 1 FB_B1, 2 LX_B1_1 (power), 3 LX_B1_2 (power), 4 PVIN_B1_1 (power), 5 PVIN_B1_2 (power), 6 PVIN_LDO1 (power), 7 VLDO1 (power), 8 GPO1, 9 SDA (io), 10 SCL (in), 11 ~{INT}, 12 VSEL_SD/VSEL_DDR, 13 VSYS (power), 14 VDD1P8 (power), 15 AGND (power), 16 GPIO, 17 GPO2, 18 ~{RSTOUT}, 19 VLDO2 (power), 20 PVIN_LDO2 (power), 21 VLDO3 (power), 22 PVIN_LDO34 (power), 23 VLDO4 (power), 24 FB_B3, 25 EN/PB/VSENSE, 26 PVIN_B3 (power), 27 LX_B3 (power), 28 MODE/RESET, 29 LX_B2 (power), 30 PVIN_B2 (power), 31 MODE/STBY, 32 FB_B2, 33 PGND (power)
text: Buck 1; 0.75V; 3.5A; Buck 2; 3.3V; 2A; Buck 3; 1.2V; 3.3V/1.8V; 400mA; 0.85V; 1.8V; 300mA; 2.5V

## USB_A
designator J?
USB Type A connector; Manufacturer_Part_Number: USB1125-GF-B; Manufacturer_Name: GCT; Value: USB1125-GF-B
footprint USB1125GFB (USB1125-GF-B-4)
pins: 1 VBUS (power), 2 D- (io), 3 D+ (io), 4 G (power), SH

## USB_A_Stacked
designator J?  (value not drawn)
USB Type A connector, stacked; Manufacturer_Name: SHOU HAN; Value: AF SS-JB17.6; Manufacturer_Part_Number: AF SS-JB17.6
footprint USB_A_CUI_UJ2-ADH-TH_Horizontal_Stacked (USB-A two stacked horizontal receptacle, through-hole (https://www.cuidevices.com/product/resource/uj2-adh-th.pdf))
pins: 1 VBUS1 (power), 2 D1- (io), 3 D1+ (io), 4 GND1 (power), 5 VBUS2 (power), 6 D2- (io), 7 D2+ (io), 8 GND2 (power), SH Shield

## USB_C_Receptacle_USB2.0_16P
designator J?  value USB4105-GF-A  (hidden comment: USB_C_Receptacle_USB2.0_16P)
USB 2.0-only 16P Type-C Receptacle connector; Manufacturer_Name: GCT; Datasheet: https://www.usb.org/sites/default/files/documents/usb_type-c.zip; ComponentLink1Description: Datasheet; ComponentLink1URL: https://www.usb.org/sites/default/files/documents/usb_type-c.zip; Manufacturer_Part_Number: USB4105-GF-A
footprint USB_C_Receptacle_GCT_USB4105-xx-A_16P_TopMnt_Horizontal (USB 2.0 Type C Receptacle, GCT, 16P, top mounted, horizontal, 5A: https://gct.co/files/drawings/usb4105.pdf)
pins: A1,A12,B1,B12 GND (power), A4,A9,B4,B9 VBUS (power), A5 CC1, A6 D+ (io), A7 D- (io), A8 SBU1 (io), B5 CC2, B6 D+ (io), B7 D- (io), B8 SBU2 (io), SH SHIELD